# Altium schematic symbol library SG2002_QFN88_38_20230301_4L_V1.3_16.2_Library.SchLib: 126 symbols (part 3 of 5)
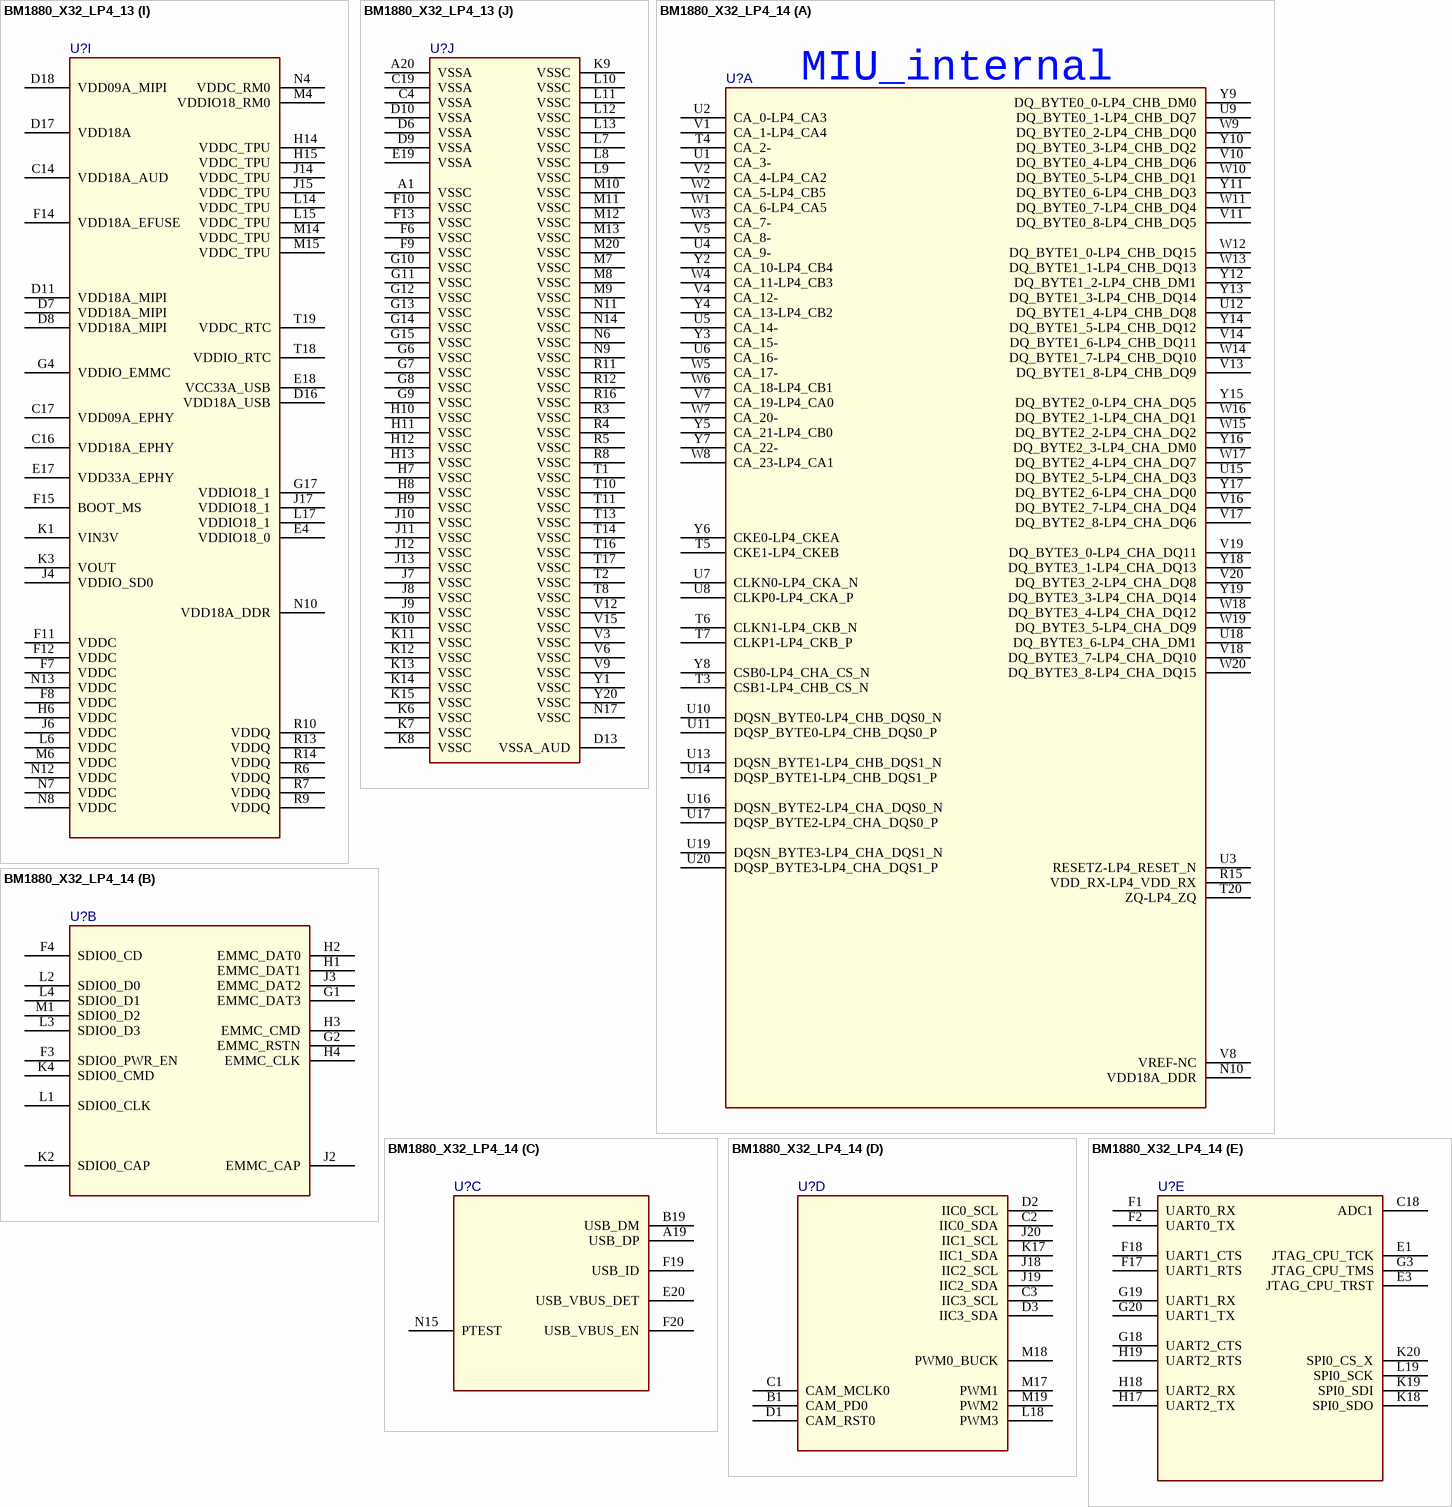
[diagram p51: symbols BM1880_X32_LP4_13 to BM1880_X32_LP4_14]

## BM1880_X32_LP4_13
designator U?
SPLIT_INST: TRUE; SWAP_INFO: (S1+S2+S3+S4+S5+S6+S7+S8+S9+S10)
footprint BGA378-26-2121-socket
part A pins: N10 VDD18A_DDR, R15 VDD_RX-LP4_VDD_RX, T3 CSB1-LP4_CHB_CS_N, T4 CA_2-, T5 CKE1-LP4_CKEB, T6 CLKN1-LP4_CKB_N, T7 CLKP1-LP4_CKB_P, T20 ZQ-LP4_ZQ, U1 CA_3-, U2 CA_0-LP4_CA3, U3 RESETZ-LP4_RESET_N, U4 CA_9-, U5 CA_14-, U6 CA_16-, U7 CLKN0-LP4_CKA_N, U8 CLKP0-LP4_CKA_P, U9 DQ_BYTE0_1-LP4_CHB_DQ7, U10 DQSN_BYTE0-LP4_CHB_DQS0_N, U11 DQSP_BYTE0-LP4_CHB_DQS0_P, U12 DQ_BYTE1_4-LP4_CHB_DQ8, U13 DQSN_BYTE1-LP4_CHB_DQS1_N, U14 DQSP_BYTE1-LP4_CHB_DQS1_P, U15 DQ_BYTE2_5-LP4_CHA_DQ3, U16 DQSN_BYTE2-LP4_CHA_DQS0_N, U17 DQSP_BYTE2-LP4_CHA_DQS0_P, U18 DQ_BYTE3_6-LP4_CHA_DM1, U19 DQSN_BYTE3-LP4_CHA_DQS1_N, U20 DQSP_BYTE3-LP4_CHA_DQS1_P, V1 CA_1-LP4_CA4, V2 CA_4-LP4_CA2, V4 CA_12-, V5 CA_8-, V7 CA_19-LP4_CA0, V8 VREF-NC, V10 DQ_BYTE0_4-LP4_CHB_DQ6, V11 DQ_BYTE0_8-LP4_CHB_DQ5, V13 DQ_BYTE1_8-LP4_CHB_DQ9, V14 DQ_BYTE1_6-LP4_CHB_DQ11, V16 DQ_BYTE2_7-LP4_CHA_DQ4, V17 DQ_BYTE2_8-LP4_CHA_DQ6, V18 DQ_BYTE3_7-LP4_CHA_DQ10, V19 DQ_BYTE3_0-LP4_CHA_DQ11, V20 DQ_BYTE3_2-LP4_CHA_DQ8, W1 CA_6-LP4_CA5, W2 CA_5-LP4_CB5, W3 CA_7-, W4 CA_11-LP4_CB3, W5 CA_17-, W6 CA_18-LP4_CB1, W7 CA_20-, W8 CA_23-LP4_CA1, W9 DQ_BYTE0_2-LP4_CHB_DQ0, W10 DQ_BYTE0_5-LP4_CHB_DQ1, W11 DQ_BYTE0_7-LP4_CHB_DQ4, W12 DQ_BYTE1_0-LP4_CHB_DQ15, W13 DQ_BYTE1_1-LP4_CHB_DQ13, W14 DQ_BYTE1_7-LP4_CHB_DQ10, W15 DQ_BYTE2_2-LP4_CHA_DQ2, W16 DQ_BYTE2_1-LP4_CHA_DQ1, W17 DQ_BYTE2_4-LP4_CHA_DQ7, W18 DQ_BYTE3_4-LP4_CHA_DQ12, W19 DQ_BYTE3_5-LP4_CHA_DQ9, W20 DQ_BYTE3_8-LP4_CHA_DQ15, Y2 CA_10-LP4_CB4, Y3 CA_15-, Y4 CA_13-LP4_CB2, Y5 CA_21-LP4_CB0, Y6 CKE0-LP4_CKEA, Y7 CA_22-, Y8 CSB0-LP4_CHA_CS_N, Y9 DQ_BYTE0_0-LP4_CHB_DM0, Y10 DQ_BYTE0_3-LP4_CHB_DQ2, Y11 DQ_BYTE0_6-LP4_CHB_DQ3, Y12 DQ_BYTE1_2-LP4_CHB_DM1, Y13 DQ_BYTE1_3-LP4_CHB_DQ14, Y14 DQ_BYTE1_5-LP4_CHB_DQ12, Y15 DQ_BYTE2_0-LP4_CHA_DQ5, Y16 DQ_BYTE2_3-LP4_CHA_DM0, Y17 DQ_BYTE2_6-LP4_CHA_DQ0, Y18 DQ_BYTE3_1-LP4_CHA_DQ13, Y19 DQ_BYTE3_3-LP4_CHA_DQ14
part B pins: F3 SDIO0_PWR_EN, F4 SDIO0_CD, G1 EMMC_DAT3, G2 EMMC_RSTN, H1 EMMC_DAT1, H2 EMMC_DAT0, H3 EMMC_CMD, H4 EMMC_CLK, J2 EMMC_CAP, J3 EMMC_DAT2, K2 SDIO0_CAP, K4 SDIO0_CMD, L1 SDIO0_CLK, L2 SDIO0_D0, L3 SDIO0_D3, L4 SDIO0_D1, M1 SDIO0_D2
part C pins: A19 USB_DP (power), B19 USB_DM (power), E20 USB_VBUS_DET (power), F19 USB_ID (power), F20 USB_VBUS_EN, N15 PTEST
part D pins: A15 AADC_AINR_MIC, A16 ADAC_AOUTR, B1 CAM_PD0, B15 AADC_AINL_MIC, B16 ADAC_AOUTL, C1 CAM_MCLK0, C2 IIC0_SDA, C3 IIC3_SCL, C15 ADAC_VREF_DA, D1 CAM_RST0, D2 IIC0_SCL, D3 IIC3_SDA, D14 AADC_VREF_AD, J18 IIC2_SCL, J19 IIC2_SDA, J20 IIC1_SCL, K17 IIC1_SDA, L18 PWM3, M17 PWM1, M18 PWM0_BUCK, M19 PWM2
part E pins: C18 ADC1, E1 JTAG_CPU_TCK, E3 JTAG_CPU_TRST, F1 UART0_RX, F2 UART0_TX, F17 UART1_RTS, F18 UART1_CTS, G3 JTAG_CPU_TMS, G18 UART2_CTS, G19 UART1_RX, G20 UART1_TX, H17 UART2_TX, H18 UART2_RX, H19 UART2_RTS, K18 SPI0_SDO, K19 SPI0_SDI, K20 SPI0_CS_X, L19 SPI0_SCK
part F pins: A17 EPHY_TXN, A18 EPHY_RXN, B17 EPHY_TXP, B18 EPHY_RXP, D15 EPHY_RTX, M2 RMII0_REFCLKI, M3 RMII0_TXD1, N2 RMII0_TXEN, N3 RMII0_TXD0, P1 RMII0_MDCK, P2 RMII0_MDIO, P3 RMII0_RXD0, P4 RMII0_RST, R1 RMII0_RXDV, R2 RMII0_RXD1
part G pins: B20 XTAL_XOUT, C20 XTAL_XIN, D19 CLK32K, D20 CLK25M, E2 RSTN, N18 PWR_ON, N19 PWR_SEQ2, N20 PWR_SEQ3, P17 PWR_WAKEUP1, P18 PWR_VBAT_DET, P19 PWR_BUTTON1, P20 PWR_SEQ1, R17 PWR_WAKEUP0, R18 RTC_MODE, R19 RTC_XIN, R20 RTC_XOUT
part H pins: A2 VI_DATA20 (power), A3 VI_DATA22 (power), A4 MIPIRX0_PAD1P (power), A5 MIPIRX0_PAD2P (power), A6 MIPIRX0_PAD3P (power), A7 MIPIRX0_PAD4P (power), A8 MIPIRX1_PAD4P (power), A9 MIPIRX1_PAD2P (power), A10 MIPIRX1_PAD0P (power), A11 PAD_MIPI_TXP0 (power), A12 PAD_MIPI_TXP2 (power), A13 PAD_MIPI_TXP3 (power), A14 VO_DATA0 (power), B2 VI_DATA19 (power), B3 VI_DATA21 (power), B4 MIPIRX0_PAD1N (power), B5 MIPIRX0_PAD2N (power), B6 MIPIRX0_PAD3N (power), B7 MIPIRX0_PAD4N (power), B8 MIPIRX1_PAD4N (power), B9 MIPIRX1_PAD2N (power), B10 MIPIRX1_PAD0N (power), B11 PAD_MIPI_TXM0 (power), B12 PAD_MIPI_TXM2 (power), B13 PAD_MIPI_TXM3 (power), B14 VO_DATA1 (power), C5 MIPIRX0_PAD0P (power), C6 MIPIRX0_PAD0N (power), C7 MIPIRX1_PAD3P (power), C8 MIPIRX1_PAD3N (power), C9 MIPIRX1_PAD1P (power), C10 MIPIRX1_PAD1N (power), C11 PAD_MIPI_TXP1 (power), C12 PAD_MIPI_TXM1 (power), C13 PAD_MIPI_TXM4 (power), D4 VI_DATA23 (power), D5 VI_DATA24 (power), D12 PAD_MIPI_TXP4 (power)
part I pins: C14 VDD18A_AUD (power), C16 VDD18A_EPHY (power), C17 VDD09A_EPHY (power), D7 VDD18A_MIPI (power), D8 VDD18A_MIPI (power), D11 VDD18A_MIPI (power), D16 VDD18A_USB, D17 VDD18A (power), D18 VDD09A_MIPI (power), E4 VDDIO18_0 (power), E17 VDD33A_EPHY (power), E18 VCC33A_USB, F7 VDDC (power), F8 VDDC (power), F11 VDDC (power), F12 VDDC (power), F14 VDD18A_EFUSE (power), F15 BOOT_MS, G4 VDDIO_EMMC (power), G17 VDDIO18_1 (power), H6 VDDC (power), H14 VDDC_TPU (power), H15 VDDC_TPU (power), J4 VDDIO_SD0 (power), J6 VDDC (power), J14 VDDC_TPU (power), J15 VDDC_TPU (power), J17 VDDIO18_1 (power), K1 VIN3V (power), K3 VOUT (power), L6 VDDC (power), L14 VDDC_TPU (power), L15 VDDC_TPU (power), L17 VDDIO18_1 (power), M4 VDDIO18_RM0 (power), M6 VDDC (power), M14 VDDC_TPU (power), M15 VDDC_TPU (power), N4 VDDC_RM0 (power), N7 VDDC (power), N8 VDDC (power), N10 VDD18A_DDR (power), N12 VDDC (power), N13 VDDC (power), R6 VDDQ (power), R7 VDDQ (power), R9 VDDQ (power), R10 VDDQ (power), R13 VDDQ (power), R14 VDDQ (power), T18 VDDIO_RTC (power), T19 VDDC_RTC (power)
part J pins: A1 VSSC (power), A20 VSSA (power), C4 VSSA (power), C19 VSSA (power), D6 VSSA (power), D9 VSSA (power), D10 VSSA (power), D13 VSSA_AUD (power), E19 VSSA (power), F6 VSSC (power), F9 VSSC (power), F10 VSSC (power), F13 VSSC (power), G6 VSSC (power), G7 VSSC (power), G8 VSSC (power), G9 VSSC (power), G10 VSSC (power), G11 VSSC (power), G12 VSSC (power), G13 VSSC (power), G14 VSSC (power), G15 VSSC (power), H7 VSSC (power), H8 VSSC (power), H9 VSSC (power), H10 VSSC (power), H11 VSSC (power), H12 VSSC (power), H13 VSSC (power), J7 VSSC (power), J8 VSSC (power), J9 VSSC (power), J10 VSSC (power), J11 VSSC (power), J12 VSSC (power), J13 VSSC (power), K6 VSSC (power), K7 VSSC (power), K8 VSSC (power), K9 VSSC (power), K10 VSSC (power), K11 VSSC (power), K12 VSSC (power), K13 VSSC (power), K14 VSSC (power), K15 VSSC (power), L7 VSSC (power), L8 VSSC (power), L9 VSSC (power), L10 VSSC (power), L11 VSSC (power), L12 VSSC (power), L13 VSSC (power), M7 VSSC (power), M8 VSSC (power), M9 VSSC (power), M10 VSSC (power), M11 VSSC (power), M12 VSSC (power), M13 VSSC (power), M20 VSSC (power), N6 VSSC (power), N9 VSSC (power), N11 VSSC (power), N14 VSSC (power), N17 VSSC (power), R3 VSSC (power), R4 VSSC (power), R5 VSSC (power), R8 VSSC (power), R11 VSSC (power), R12 VSSC (power), R16 VSSC (power), T1 VSSC (power), T2 VSSC (power), T8 VSSC (power), T10 VSSC (power), T11 VSSC (power), T13 VSSC (power), T14 VSSC (power), T16 VSSC (power), T17 VSSC (power), V3 VSSC (power), V6 VSSC (power), V9 VSSC (power), V12 VSSC (power), V15 VSSC (power), Y1 VSSC (power), Y20 VSSC (power)
part A text: MIU_internal

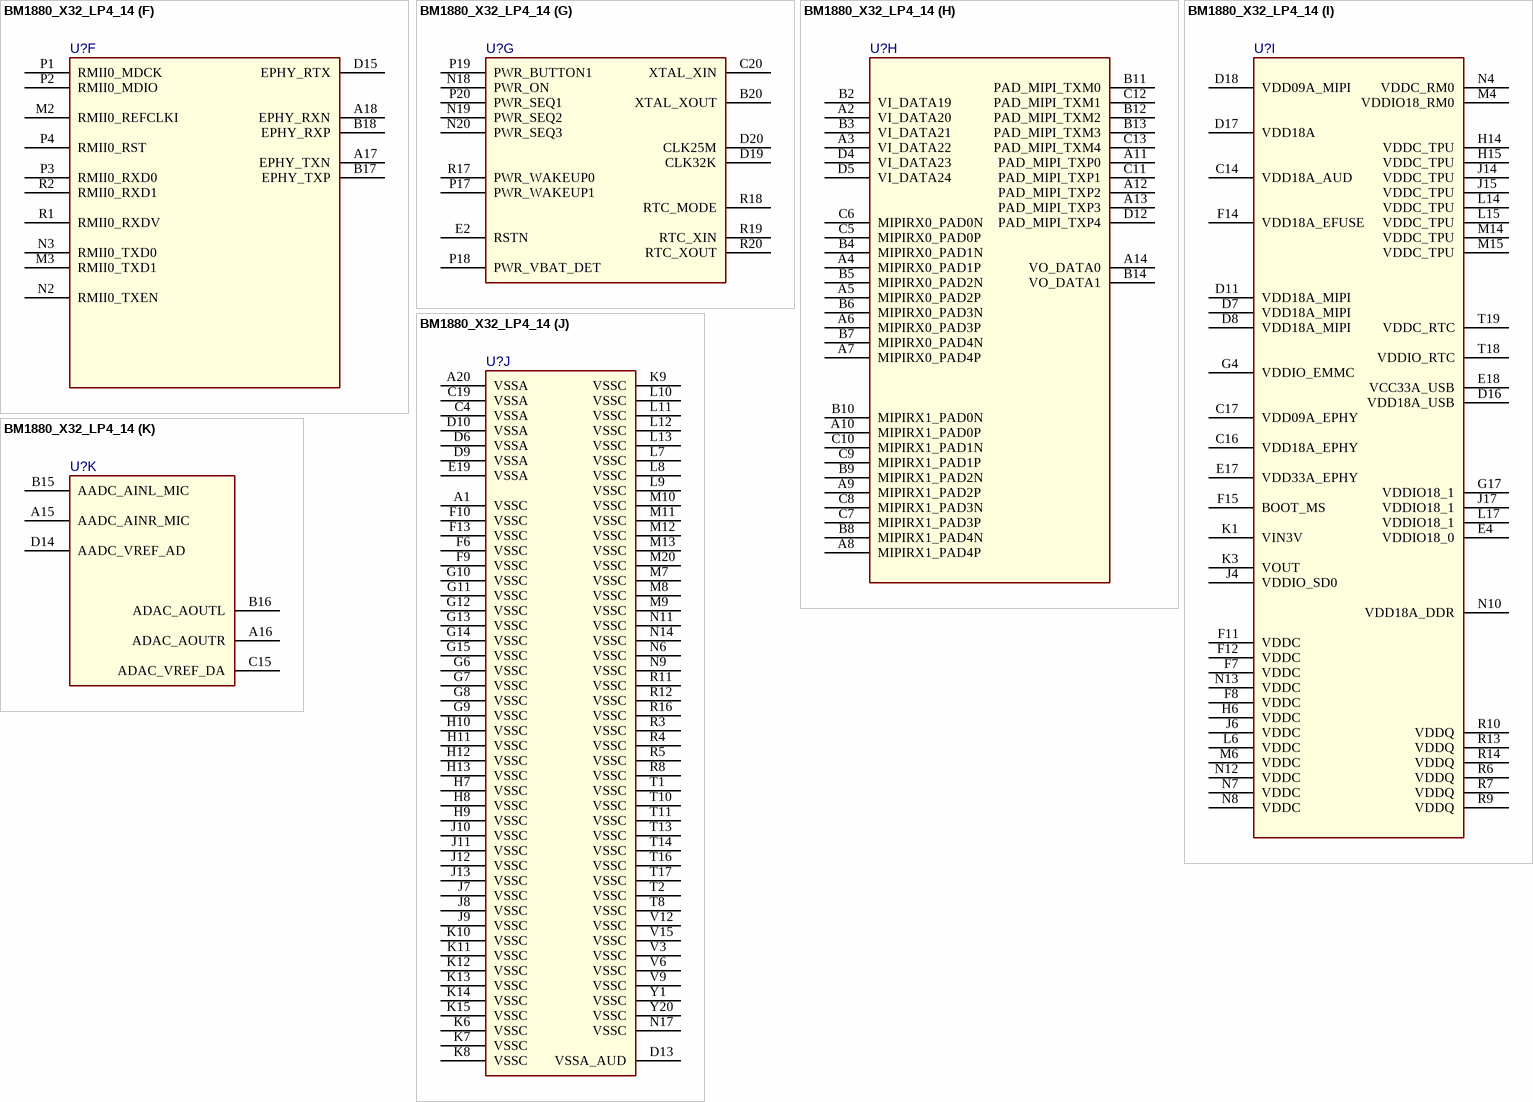
[diagram p27: symbol BM1880_X32_LP4_14]

## BM1880_X32_LP4_14
designator U?
SPLIT_INST: TRUE; SWAP_INFO: (S1+S2+S3+S4+S5+S6+S7+S8+S9+S10)
footprint BGA378-26-2121-socket
part A pins: N10 VDD18A_DDR, R15 VDD_RX-LP4_VDD_RX, T3 CSB1-LP4_CHB_CS_N, T4 CA_2-, T5 CKE1-LP4_CKEB, T6 CLKN1-LP4_CKB_N, T7 CLKP1-LP4_CKB_P, T20 ZQ-LP4_ZQ, U1 CA_3-, U2 CA_0-LP4_CA3, U3 RESETZ-LP4_RESET_N, U4 CA_9-, U5 CA_14-, U6 CA_16-, U7 CLKN0-LP4_CKA_N, U8 CLKP0-LP4_CKA_P, U9 DQ_BYTE0_1-LP4_CHB_DQ7, U10 DQSN_BYTE0-LP4_CHB_DQS0_N, U11 DQSP_BYTE0-LP4_CHB_DQS0_P, U12 DQ_BYTE1_4-LP4_CHB_DQ8, U13 DQSN_BYTE1-LP4_CHB_DQS1_N, U14 DQSP_BYTE1-LP4_CHB_DQS1_P, U15 DQ_BYTE2_5-LP4_CHA_DQ3, U16 DQSN_BYTE2-LP4_CHA_DQS0_N, U17 DQSP_BYTE2-LP4_CHA_DQS0_P, U18 DQ_BYTE3_6-LP4_CHA_DM1, U19 DQSN_BYTE3-LP4_CHA_DQS1_N, U20 DQSP_BYTE3-LP4_CHA_DQS1_P, V1 CA_1-LP4_CA4, V2 CA_4-LP4_CA2, V4 CA_12-, V5 CA_8-, V7 CA_19-LP4_CA0, V8 VREF-NC, V10 DQ_BYTE0_4-LP4_CHB_DQ6, V11 DQ_BYTE0_8-LP4_CHB_DQ5, V13 DQ_BYTE1_8-LP4_CHB_DQ9, V14 DQ_BYTE1_6-LP4_CHB_DQ11, V16 DQ_BYTE2_7-LP4_CHA_DQ4, V17 DQ_BYTE2_8-LP4_CHA_DQ6, V18 DQ_BYTE3_7-LP4_CHA_DQ10, V19 DQ_BYTE3_0-LP4_CHA_DQ11, V20 DQ_BYTE3_2-LP4_CHA_DQ8, W1 CA_6-LP4_CA5, W2 CA_5-LP4_CB5, W3 CA_7-, W4 CA_11-LP4_CB3, W5 CA_17-, W6 CA_18-LP4_CB1, W7 CA_20-, W8 CA_23-LP4_CA1, W9 DQ_BYTE0_2-LP4_CHB_DQ0, W10 DQ_BYTE0_5-LP4_CHB_DQ1, W11 DQ_BYTE0_7-LP4_CHB_DQ4, W12 DQ_BYTE1_0-LP4_CHB_DQ15, W13 DQ_BYTE1_1-LP4_CHB_DQ13, W14 DQ_BYTE1_7-LP4_CHB_DQ10, W15 DQ_BYTE2_2-LP4_CHA_DQ2, W16 DQ_BYTE2_1-LP4_CHA_DQ1, W17 DQ_BYTE2_4-LP4_CHA_DQ7, W18 DQ_BYTE3_4-LP4_CHA_DQ12, W19 DQ_BYTE3_5-LP4_CHA_DQ9, W20 DQ_BYTE3_8-LP4_CHA_DQ15, Y2 CA_10-LP4_CB4, Y3 CA_15-, Y4 CA_13-LP4_CB2, Y5 CA_21-LP4_CB0, Y6 CKE0-LP4_CKEA, Y7 CA_22-, Y8 CSB0-LP4_CHA_CS_N, Y9 DQ_BYTE0_0-LP4_CHB_DM0, Y10 DQ_BYTE0_3-LP4_CHB_DQ2, Y11 DQ_BYTE0_6-LP4_CHB_DQ3, Y12 DQ_BYTE1_2-LP4_CHB_DM1, Y13 DQ_BYTE1_3-LP4_CHB_DQ14, Y14 DQ_BYTE1_5-LP4_CHB_DQ12, Y15 DQ_BYTE2_0-LP4_CHA_DQ5, Y16 DQ_BYTE2_3-LP4_CHA_DM0, Y17 DQ_BYTE2_6-LP4_CHA_DQ0, Y18 DQ_BYTE3_1-LP4_CHA_DQ13, Y19 DQ_BYTE3_3-LP4_CHA_DQ14
part B pins: F3 SDIO0_PWR_EN, F4 SDIO0_CD, G1 EMMC_DAT3, G2 EMMC_RSTN, H1 EMMC_DAT1, H2 EMMC_DAT0, H3 EMMC_CMD, H4 EMMC_CLK, J2 EMMC_CAP, J3 EMMC_DAT2, K2 SDIO0_CAP, K4 SDIO0_CMD, L1 SDIO0_CLK, L2 SDIO0_D0, L3 SDIO0_D3, L4 SDIO0_D1, M1 SDIO0_D2
part C pins: A19 USB_DP (power), B19 USB_DM (power), E20 USB_VBUS_DET (power), F19 USB_ID (power), F20 USB_VBUS_EN, N15 PTEST
part D pins: B1 CAM_PD0, C1 CAM_MCLK0, C2 IIC0_SDA, C3 IIC3_SCL, D1 CAM_RST0, D2 IIC0_SCL, D3 IIC3_SDA, J18 IIC2_SCL, J19 IIC2_SDA, J20 IIC1_SCL, K17 IIC1_SDA, L18 PWM3, M17 PWM1, M18 PWM0_BUCK, M19 PWM2
part E pins: C18 ADC1, E1 JTAG_CPU_TCK, E3 JTAG_CPU_TRST, F1 UART0_RX, F2 UART0_TX, F17 UART1_RTS, F18 UART1_CTS, G3 JTAG_CPU_TMS, G18 UART2_CTS, G19 UART1_RX, G20 UART1_TX, H17 UART2_TX, H18 UART2_RX, H19 UART2_RTS, K18 SPI0_SDO, K19 SPI0_SDI, K20 SPI0_CS_X, L19 SPI0_SCK
part F pins: A17 EPHY_TXN, A18 EPHY_RXN, B17 EPHY_TXP, B18 EPHY_RXP, D15 EPHY_RTX, M2 RMII0_REFCLKI, M3 RMII0_TXD1, N2 RMII0_TXEN, N3 RMII0_TXD0, P1 RMII0_MDCK, P2 RMII0_MDIO, P3 RMII0_RXD0, P4 RMII0_RST, R1 RMII0_RXDV, R2 RMII0_RXD1
part G pins: B20 XTAL_XOUT, C20 XTAL_XIN, D19 CLK32K, D20 CLK25M, E2 RSTN, N18 PWR_ON, N19 PWR_SEQ2, N20 PWR_SEQ3, P17 PWR_WAKEUP1, P18 PWR_VBAT_DET, P19 PWR_BUTTON1, P20 PWR_SEQ1, R17 PWR_WAKEUP0, R18 RTC_MODE, R19 RTC_XIN, R20 RTC_XOUT
part H pins: A2 VI_DATA20 (power), A3 VI_DATA22 (power), A4 MIPIRX0_PAD1P (power), A5 MIPIRX0_PAD2P (power), A6 MIPIRX0_PAD3P (power), A7 MIPIRX0_PAD4P (power), A8 MIPIRX1_PAD4P (power), A9 MIPIRX1_PAD2P (power), A10 MIPIRX1_PAD0P (power), A11 PAD_MIPI_TXP0 (power), A12 PAD_MIPI_TXP2 (power), A13 PAD_MIPI_TXP3 (power), A14 VO_DATA0 (power), B2 VI_DATA19 (power), B3 VI_DATA21 (power), B4 MIPIRX0_PAD1N (power), B5 MIPIRX0_PAD2N (power), B6 MIPIRX0_PAD3N (power), B7 MIPIRX0_PAD4N (power), B8 MIPIRX1_PAD4N (power), B9 MIPIRX1_PAD2N (power), B10 MIPIRX1_PAD0N (power), B11 PAD_MIPI_TXM0 (power), B12 PAD_MIPI_TXM2 (power), B13 PAD_MIPI_TXM3 (power), B14 VO_DATA1 (power), C5 MIPIRX0_PAD0P (power), C6 MIPIRX0_PAD0N (power), C7 MIPIRX1_PAD3P (power), C8 MIPIRX1_PAD3N (power), C9 MIPIRX1_PAD1P (power), C10 MIPIRX1_PAD1N (power), C11 PAD_MIPI_TXP1 (power), C12 PAD_MIPI_TXM1 (power), C13 PAD_MIPI_TXM4 (power), D4 VI_DATA23 (power), D5 VI_DATA24 (power), D12 PAD_MIPI_TXP4 (power)
part I pins: C14 VDD18A_AUD (power), C16 VDD18A_EPHY (power), C17 VDD09A_EPHY (power), D7 VDD18A_MIPI (power), D8 VDD18A_MIPI (power), D11 VDD18A_MIPI (power), D16 VDD18A_USB, D17 VDD18A (power), D18 VDD09A_MIPI (power), E4 VDDIO18_0 (power), E17 VDD33A_EPHY (power), E18 VCC33A_USB, F7 VDDC (power), F8 VDDC (power), F11 VDDC (power), F12 VDDC (power), F14 VDD18A_EFUSE (power), F15 BOOT_MS, G4 VDDIO_EMMC (power), G17 VDDIO18_1 (power), H6 VDDC (power), H14 VDDC_TPU (power), H15 VDDC_TPU (power), J4 VDDIO_SD0 (power), J6 VDDC (power), J14 VDDC_TPU (power), J15 VDDC_TPU (power), J17 VDDIO18_1 (power), K1 VIN3V (power), K3 VOUT (power), L6 VDDC (power), L14 VDDC_TPU (power), L15 VDDC_TPU (power), L17 VDDIO18_1 (power), M4 VDDIO18_RM0 (power), M6 VDDC (power), M14 VDDC_TPU (power), M15 VDDC_TPU (power), N4 VDDC_RM0 (power), N7 VDDC (power), N8 VDDC (power), N10 VDD18A_DDR (power), N12 VDDC (power), N13 VDDC (power), R6 VDDQ (power), R7 VDDQ (power), R9 VDDQ (power), R10 VDDQ (power), R13 VDDQ (power), R14 VDDQ (power), T18 VDDIO_RTC (power), T19 VDDC_RTC (power)
part J pins: A1 VSSC (power), A20 VSSA (power), C4 VSSA (power), C19 VSSA (power), D6 VSSA (power), D9 VSSA (power), D10 VSSA (power), D13 VSSA_AUD (power), E19 VSSA (power), F6 VSSC (power), F9 VSSC (power), F10 VSSC (power), F13 VSSC (power), G6 VSSC (power), G7 VSSC (power), G8 VSSC (power), G9 VSSC (power), G10 VSSC (power), G11 VSSC (power), G12 VSSC (power), G13 VSSC (power), G14 VSSC (power), G15 VSSC (power), H7 VSSC (power), H8 VSSC (power), H9 VSSC (power), H10 VSSC (power), H11 VSSC (power), H12 VSSC (power), H13 VSSC (power), J7 VSSC (power), J8 VSSC (power), J9 VSSC (power), J10 VSSC (power), J11 VSSC (power), J12 VSSC (power), J13 VSSC (power), K6 VSSC (power), K7 VSSC (power), K8 VSSC (power), K9 VSSC (power), K10 VSSC (power), K11 VSSC (power), K12 VSSC (power), K13 VSSC (power), K14 VSSC (power), K15 VSSC (power), L7 VSSC (power), L8 VSSC (power), L9 VSSC (power), L10 VSSC (power), L11 VSSC (power), L12 VSSC (power), L13 VSSC (power), M7 VSSC (power), M8 VSSC (power), M9 VSSC (power), M10 VSSC (power), M11 VSSC (power), M12 VSSC (power), M13 VSSC (power), M20 VSSC (power), N6 VSSC (power), N9 VSSC (power), N11 VSSC (power), N14 VSSC (power), N17 VSSC (power), R3 VSSC (power), R4 VSSC (power), R5 VSSC (power), R8 VSSC (power), R11 VSSC (power), R12 VSSC (power), R16 VSSC (power), T1 VSSC (power), T2 VSSC (power), T8 VSSC (power), T10 VSSC (power), T11 VSSC (power), T13 VSSC (power), T14 VSSC (power), T16 VSSC (power), T17 VSSC (power), V3 VSSC (power), V6 VSSC (power), V9 VSSC (power), V12 VSSC (power), V15 VSSC (power), Y1 VSSC (power), Y20 VSSC (power)
part K pins: A15 AADC_AINR_MIC, A16 ADAC_AOUTR, B15 AADC_AINL_MIC, B16 ADAC_AOUTL, C15 ADAC_VREF_DA, D14 AADC_VREF_AD
part A text: MIU_internal

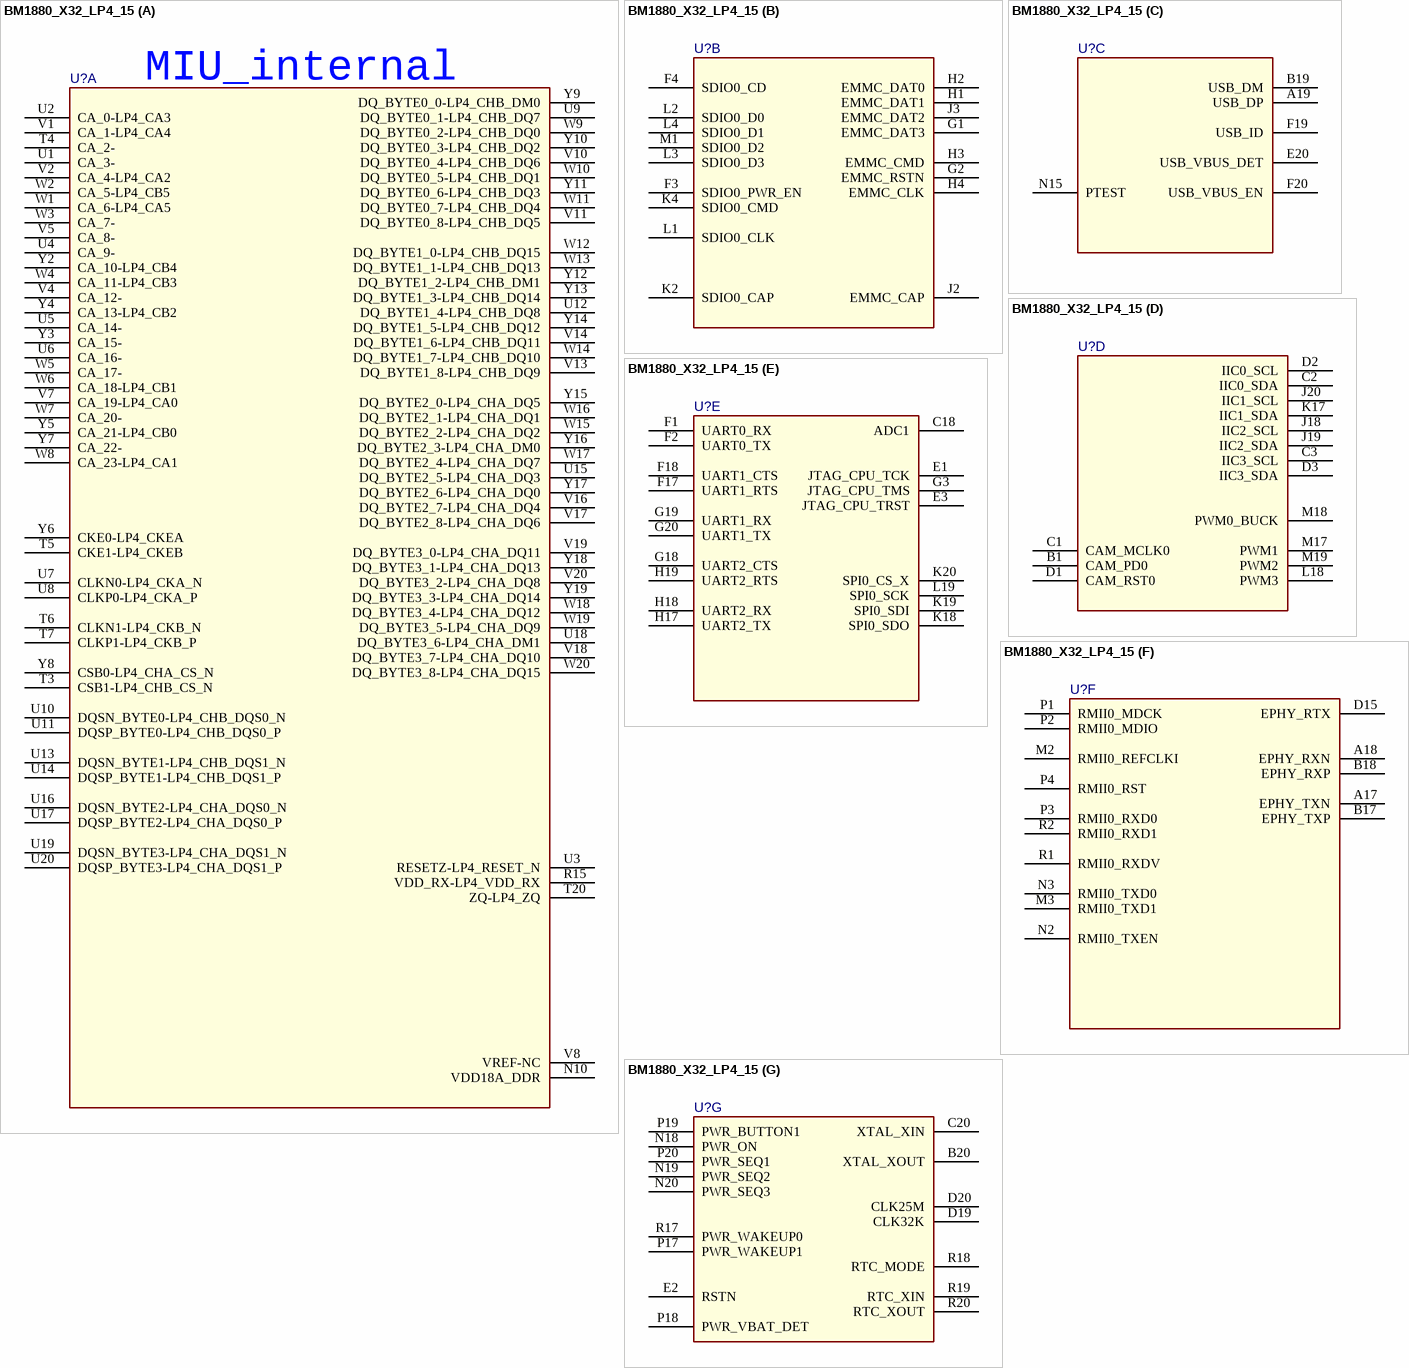
[diagram p28: symbol BM1880_X32_LP4_15]

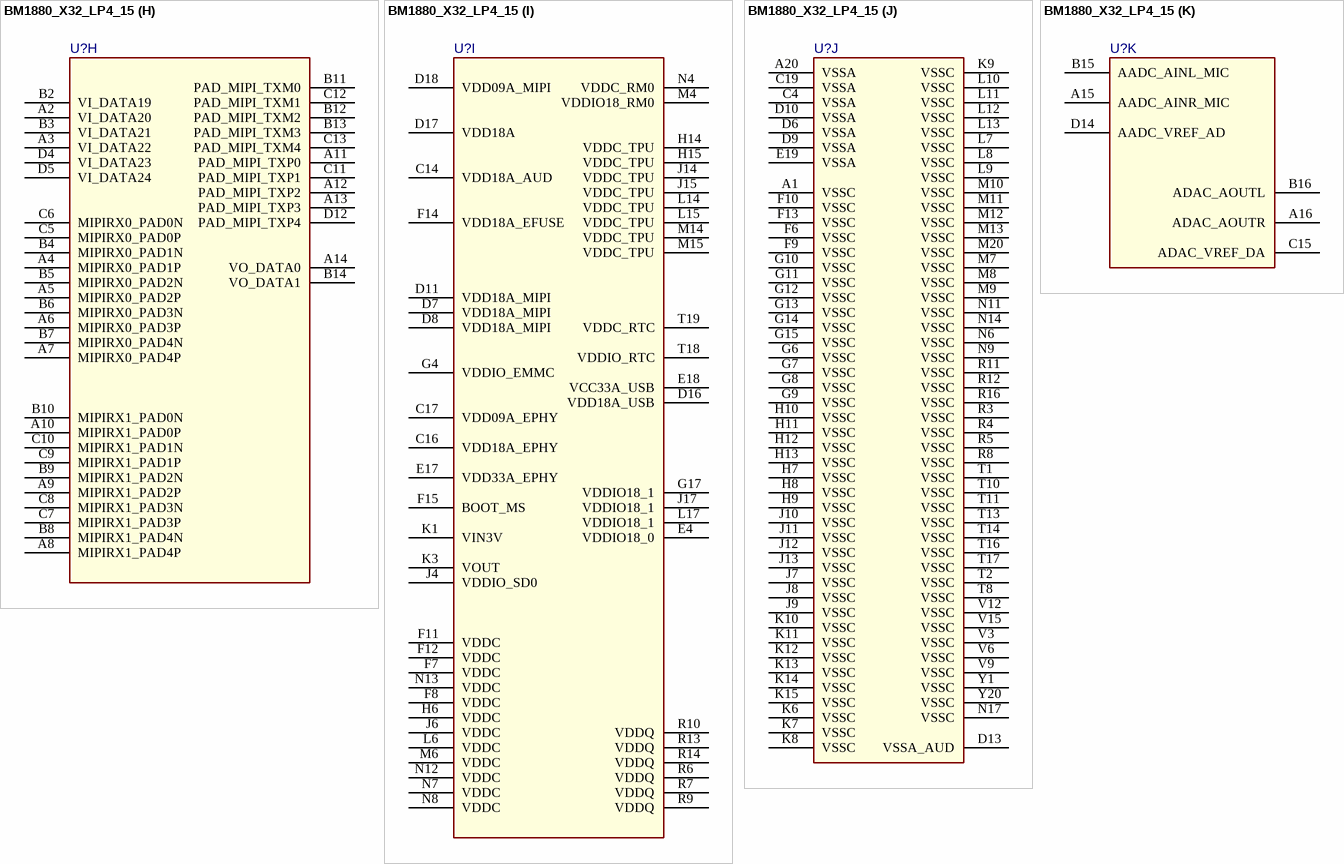
[diagram p29: symbol BM1880_X32_LP4_15]

## BM1880_X32_LP4_15
designator U?
SPLIT_INST: TRUE; SWAP_INFO: (S1+S2+S3+S4+S5+S6+S7+S8+S9+S10)
footprint BGA378-26-2121-socket
part A pins: N10 VDD18A_DDR, R15 VDD_RX-LP4_VDD_RX, T3 CSB1-LP4_CHB_CS_N, T4 CA_2-, T5 CKE1-LP4_CKEB, T6 CLKN1-LP4_CKB_N, T7 CLKP1-LP4_CKB_P, T20 ZQ-LP4_ZQ, U1 CA_3-, U2 CA_0-LP4_CA3, U3 RESETZ-LP4_RESET_N, U4 CA_9-, U5 CA_14-, U6 CA_16-, U7 CLKN0-LP4_CKA_N, U8 CLKP0-LP4_CKA_P, U9 DQ_BYTE0_1-LP4_CHB_DQ7, U10 DQSN_BYTE0-LP4_CHB_DQS0_N, U11 DQSP_BYTE0-LP4_CHB_DQS0_P, U12 DQ_BYTE1_4-LP4_CHB_DQ8, U13 DQSN_BYTE1-LP4_CHB_DQS1_N, U14 DQSP_BYTE1-LP4_CHB_DQS1_P, U15 DQ_BYTE2_5-LP4_CHA_DQ3, U16 DQSN_BYTE2-LP4_CHA_DQS0_N, U17 DQSP_BYTE2-LP4_CHA_DQS0_P, U18 DQ_BYTE3_6-LP4_CHA_DM1, U19 DQSN_BYTE3-LP4_CHA_DQS1_N, U20 DQSP_BYTE3-LP4_CHA_DQS1_P, V1 CA_1-LP4_CA4, V2 CA_4-LP4_CA2, V4 CA_12-, V5 CA_8-, V7 CA_19-LP4_CA0, V8 VREF-NC, V10 DQ_BYTE0_4-LP4_CHB_DQ6, V11 DQ_BYTE0_8-LP4_CHB_DQ5, V13 DQ_BYTE1_8-LP4_CHB_DQ9, V14 DQ_BYTE1_6-LP4_CHB_DQ11, V16 DQ_BYTE2_7-LP4_CHA_DQ4, V17 DQ_BYTE2_8-LP4_CHA_DQ6, V18 DQ_BYTE3_7-LP4_CHA_DQ10, V19 DQ_BYTE3_0-LP4_CHA_DQ11, V20 DQ_BYTE3_2-LP4_CHA_DQ8, W1 CA_6-LP4_CA5, W2 CA_5-LP4_CB5, W3 CA_7-, W4 CA_11-LP4_CB3, W5 CA_17-, W6 CA_18-LP4_CB1, W7 CA_20-, W8 CA_23-LP4_CA1, W9 DQ_BYTE0_2-LP4_CHB_DQ0, W10 DQ_BYTE0_5-LP4_CHB_DQ1, W11 DQ_BYTE0_7-LP4_CHB_DQ4, W12 DQ_BYTE1_0-LP4_CHB_DQ15, W13 DQ_BYTE1_1-LP4_CHB_DQ13, W14 DQ_BYTE1_7-LP4_CHB_DQ10, W15 DQ_BYTE2_2-LP4_CHA_DQ2, W16 DQ_BYTE2_1-LP4_CHA_DQ1, W17 DQ_BYTE2_4-LP4_CHA_DQ7, W18 DQ_BYTE3_4-LP4_CHA_DQ12, W19 DQ_BYTE3_5-LP4_CHA_DQ9, W20 DQ_BYTE3_8-LP4_CHA_DQ15, Y2 CA_10-LP4_CB4, Y3 CA_15-, Y4 CA_13-LP4_CB2, Y5 CA_21-LP4_CB0, Y6 CKE0-LP4_CKEA, Y7 CA_22-, Y8 CSB0-LP4_CHA_CS_N, Y9 DQ_BYTE0_0-LP4_CHB_DM0, Y10 DQ_BYTE0_3-LP4_CHB_DQ2, Y11 DQ_BYTE0_6-LP4_CHB_DQ3, Y12 DQ_BYTE1_2-LP4_CHB_DM1, Y13 DQ_BYTE1_3-LP4_CHB_DQ14, Y14 DQ_BYTE1_5-LP4_CHB_DQ12, Y15 DQ_BYTE2_0-LP4_CHA_DQ5, Y16 DQ_BYTE2_3-LP4_CHA_DM0, Y17 DQ_BYTE2_6-LP4_CHA_DQ0, Y18 DQ_BYTE3_1-LP4_CHA_DQ13, Y19 DQ_BYTE3_3-LP4_CHA_DQ14
part B pins: F3 SDIO0_PWR_EN, F4 SDIO0_CD, G1 EMMC_DAT3, G2 EMMC_RSTN, H1 EMMC_DAT1, H2 EMMC_DAT0, H3 EMMC_CMD, H4 EMMC_CLK, J2 EMMC_CAP, J3 EMMC_DAT2, K2 SDIO0_CAP, K4 SDIO0_CMD, L1 SDIO0_CLK, L2 SDIO0_D0, L3 SDIO0_D3, L4 SDIO0_D1, M1 SDIO0_D2
part C pins: A19 USB_DP (power), B19 USB_DM (power), E20 USB_VBUS_DET (power), F19 USB_ID (power), F20 USB_VBUS_EN, N15 PTEST
part D pins: B1 CAM_PD0, C1 CAM_MCLK0, C2 IIC0_SDA, C3 IIC3_SCL, D1 CAM_RST0, D2 IIC0_SCL, D3 IIC3_SDA, J18 IIC2_SCL, J19 IIC2_SDA, J20 IIC1_SCL, K17 IIC1_SDA, L18 PWM3, M17 PWM1, M18 PWM0_BUCK, M19 PWM2
part E pins: C18 ADC1, E1 JTAG_CPU_TCK, E3 JTAG_CPU_TRST, F1 UART0_RX, F2 UART0_TX, F17 UART1_RTS, F18 UART1_CTS, G3 JTAG_CPU_TMS, G18 UART2_CTS, G19 UART1_RX, G20 UART1_TX, H17 UART2_TX, H18 UART2_RX, H19 UART2_RTS, K18 SPI0_SDO, K19 SPI0_SDI, K20 SPI0_CS_X, L19 SPI0_SCK
part F pins: A17 EPHY_TXN, A18 EPHY_RXN, B17 EPHY_TXP, B18 EPHY_RXP, D15 EPHY_RTX, M2 RMII0_REFCLKI, M3 RMII0_TXD1, N2 RMII0_TXEN, N3 RMII0_TXD0, P1 RMII0_MDCK, P2 RMII0_MDIO, P3 RMII0_RXD0, P4 RMII0_RST, R1 RMII0_RXDV, R2 RMII0_RXD1
part G pins: B20 XTAL_XOUT, C20 XTAL_XIN, D19 CLK32K, D20 CLK25M, E2 RSTN, N18 PWR_ON, N19 PWR_SEQ2, N20 PWR_SEQ3, P17 PWR_WAKEUP1, P18 PWR_VBAT_DET, P19 PWR_BUTTON1, P20 PWR_SEQ1, R17 PWR_WAKEUP0, R18 RTC_MODE, R19 RTC_XIN, R20 RTC_XOUT
part H pins: A2 VI_DATA20 (power), A3 VI_DATA22 (power), A4 MIPIRX0_PAD1P (power), A5 MIPIRX0_PAD2P (power), A6 MIPIRX0_PAD3P (power), A7 MIPIRX0_PAD4P (power), A8 MIPIRX1_PAD4P (power), A9 MIPIRX1_PAD2P (power), A10 MIPIRX1_PAD0P (power), A11 PAD_MIPI_TXP0 (power), A12 PAD_MIPI_TXP2 (power), A13 PAD_MIPI_TXP3 (power), A14 VO_DATA0 (power), B2 VI_DATA19 (power), B3 VI_DATA21 (power), B4 MIPIRX0_PAD1N (power), B5 MIPIRX0_PAD2N (power), B6 MIPIRX0_PAD3N (power), B7 MIPIRX0_PAD4N (power), B8 MIPIRX1_PAD4N (power), B9 MIPIRX1_PAD2N (power), B10 MIPIRX1_PAD0N (power), B11 PAD_MIPI_TXM0 (power), B12 PAD_MIPI_TXM2 (power), B13 PAD_MIPI_TXM3 (power), B14 VO_DATA1 (power), C5 MIPIRX0_PAD0P (power), C6 MIPIRX0_PAD0N (power), C7 MIPIRX1_PAD3P (power), C8 MIPIRX1_PAD3N (power), C9 MIPIRX1_PAD1P (power), C10 MIPIRX1_PAD1N (power), C11 PAD_MIPI_TXP1 (power), C12 PAD_MIPI_TXM1 (power), C13 PAD_MIPI_TXM4 (power), D4 VI_DATA23 (power), D5 VI_DATA24 (power), D12 PAD_MIPI_TXP4 (power)
part I pins: C14 VDD18A_AUD (power), C16 VDD18A_EPHY (power), C17 VDD09A_EPHY (power), D7 VDD18A_MIPI (power), D8 VDD18A_MIPI (power), D11 VDD18A_MIPI (power), D16 VDD18A_USB, D17 VDD18A (power), D18 VDD09A_MIPI (power), E4 VDDIO18_0 (power), E17 VDD33A_EPHY (power), E18 VCC33A_USB, F7 VDDC (power), F8 VDDC (power), F11 VDDC (power), F12 VDDC (power), F14 VDD18A_EFUSE (power), F15 BOOT_MS, G4 VDDIO_EMMC (power), G17 VDDIO18_1 (power), H6 VDDC (power), H14 VDDC_TPU (power), H15 VDDC_TPU (power), J4 VDDIO_SD0 (power), J6 VDDC (power), J14 VDDC_TPU (power), J15 VDDC_TPU (power), J17 VDDIO18_1 (power), K1 VIN3V (power), K3 VOUT (power), L6 VDDC (power), L14 VDDC_TPU (power), L15 VDDC_TPU (power), L17 VDDIO18_1 (power), M4 VDDIO18_RM0 (power), M6 VDDC (power), M14 VDDC_TPU (power), M15 VDDC_TPU (power), N4 VDDC_RM0 (power), N7 VDDC (power), N8 VDDC (power), N12 VDDC (power), N13 VDDC (power), R6 VDDQ (power), R7 VDDQ (power), R9 VDDQ (power), R10 VDDQ (power), R13 VDDQ (power), R14 VDDQ (power), T18 VDDIO_RTC (power), T19 VDDC_RTC (power)
part J pins: A1 VSSC (power), A20 VSSA (power), C4 VSSA (power), C19 VSSA (power), D6 VSSA (power), D9 VSSA (power), D10 VSSA (power), D13 VSSA_AUD (power), E19 VSSA (power), F6 VSSC (power), F9 VSSC (power), F10 VSSC (power), F13 VSSC (power), G6 VSSC (power), G7 VSSC (power), G8 VSSC (power), G9 VSSC (power), G10 VSSC (power), G11 VSSC (power), G12 VSSC (power), G13 VSSC (power), G14 VSSC (power), G15 VSSC (power), H7 VSSC (power), H8 VSSC (power), H9 VSSC (power), H10 VSSC (power), H11 VSSC (power), H12 VSSC (power), H13 VSSC (power), J7 VSSC (power), J8 VSSC (power), J9 VSSC (power), J10 VSSC (power), J11 VSSC (power), J12 VSSC (power), J13 VSSC (power), K6 VSSC (power), K7 VSSC (power), K8 VSSC (power), K9 VSSC (power), K10 VSSC (power), K11 VSSC (power), K12 VSSC (power), K13 VSSC (power), K14 VSSC (power), K15 VSSC (power), L7 VSSC (power), L8 VSSC (power), L9 VSSC (power), L10 VSSC (power), L11 VSSC (power), L12 VSSC (power), L13 VSSC (power), M7 VSSC (power), M8 VSSC (power), M9 VSSC (power), M10 VSSC (power), M11 VSSC (power), M12 VSSC (power), M13 VSSC (power), M20 VSSC (power), N6 VSSC (power), N9 VSSC (power), N11 VSSC (power), N14 VSSC (power), N17 VSSC (power), R3 VSSC (power), R4 VSSC (power), R5 VSSC (power), R8 VSSC (power), R11 VSSC (power), R12 VSSC (power), R16 VSSC (power), T1 VSSC (power), T2 VSSC (power), T8 VSSC (power), T10 VSSC (power), T11 VSSC (power), T13 VSSC (power), T14 VSSC (power), T16 VSSC (power), T17 VSSC (power), V3 VSSC (power), V6 VSSC (power), V9 VSSC (power), V12 VSSC (power), V15 VSSC (power), Y1 VSSC (power), Y20 VSSC (power)
part K pins: A15 AADC_AINR_MIC, A16 ADAC_AOUTR, B15 AADC_AINL_MIC, B16 ADAC_AOUTL, C15 ADAC_VREF_DA, D14 AADC_VREF_AD
part A text: MIU_internal

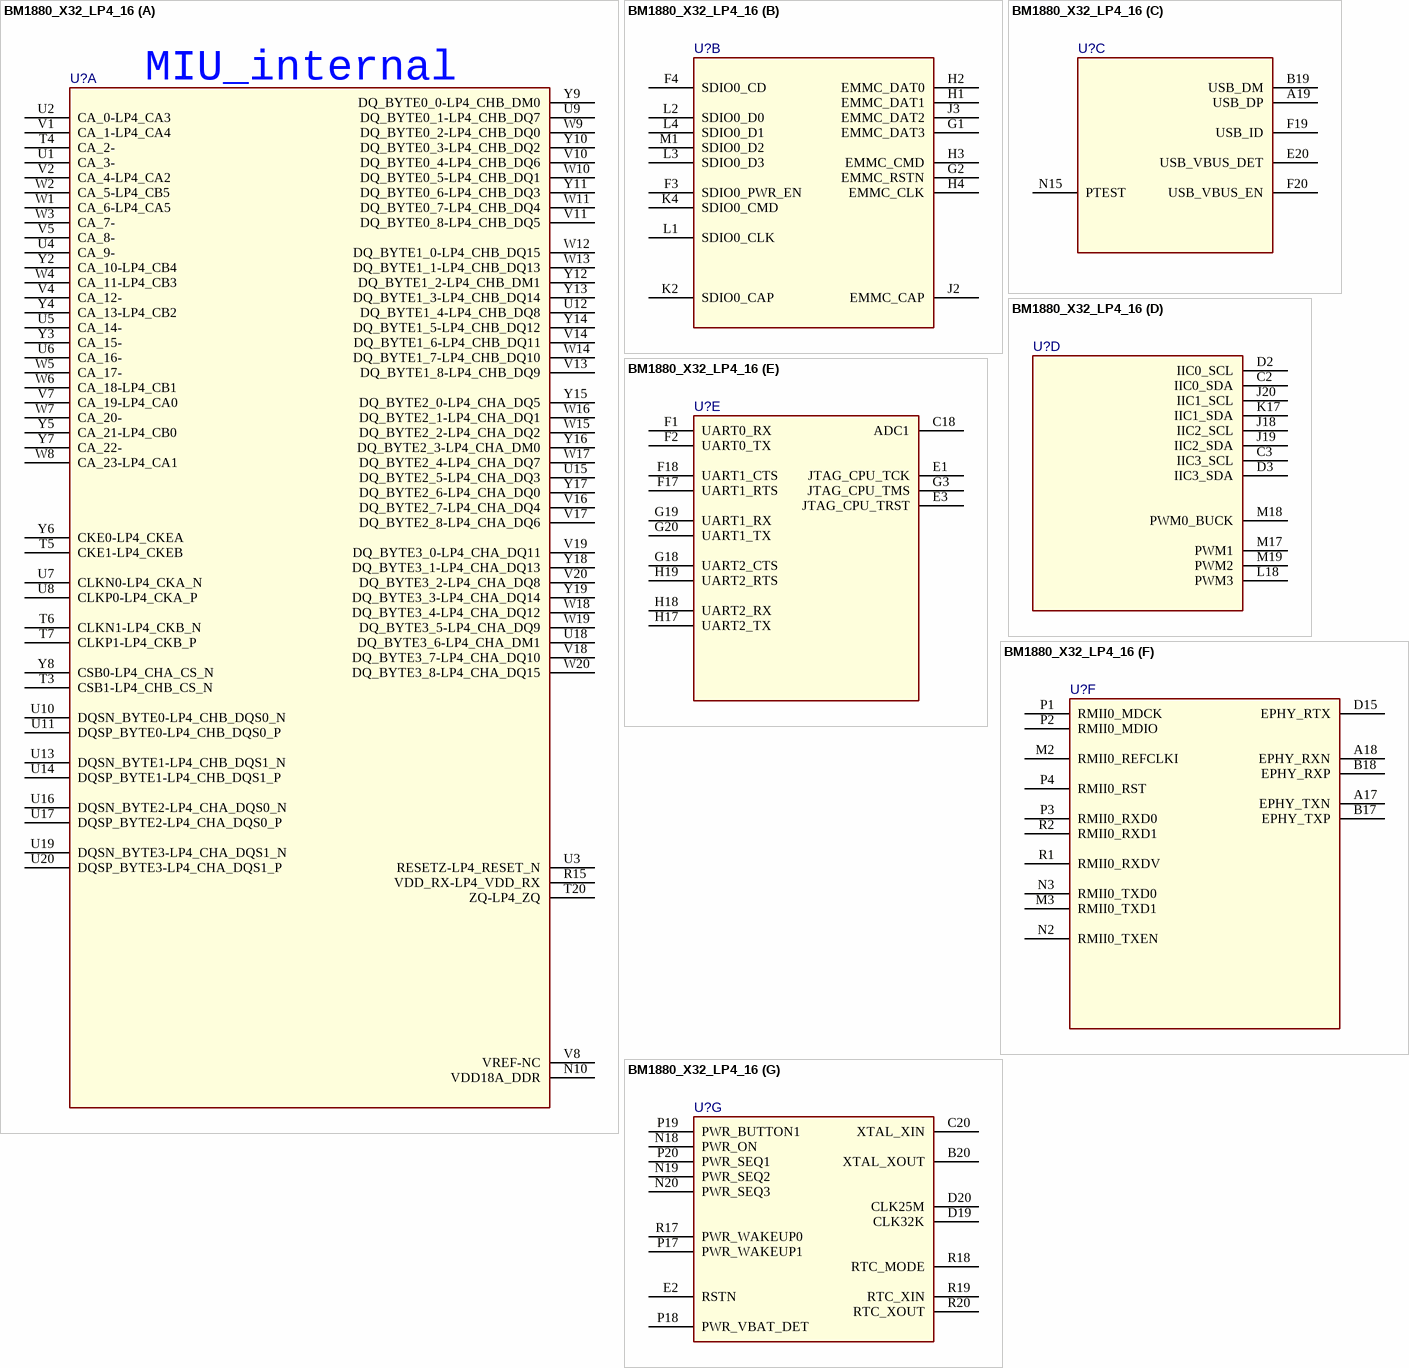
[diagram p30: symbol BM1880_X32_LP4_16]

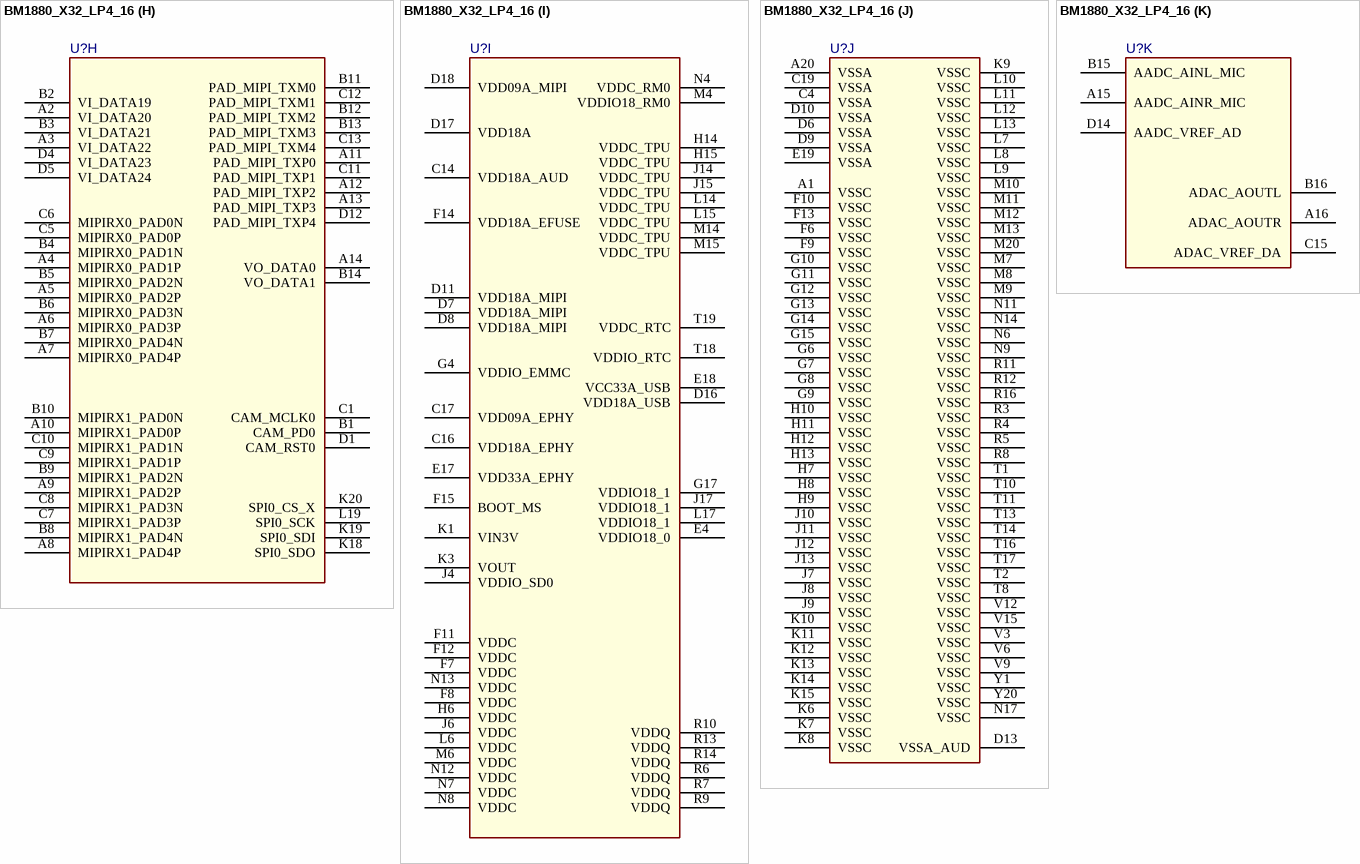
[diagram p31: symbol BM1880_X32_LP4_16]

## BM1880_X32_LP4_16
designator U?
SPLIT_INST: TRUE; SWAP_INFO: (S1+S2+S3+S4+S5+S6+S7+S8+S9+S10)
footprint BGA378-26-2121-socket
part A pins: N10 VDD18A_DDR, R15 VDD_RX-LP4_VDD_RX, T3 CSB1-LP4_CHB_CS_N, T4 CA_2-, T5 CKE1-LP4_CKEB, T6 CLKN1-LP4_CKB_N, T7 CLKP1-LP4_CKB_P, T20 ZQ-LP4_ZQ, U1 CA_3-, U2 CA_0-LP4_CA3, U3 RESETZ-LP4_RESET_N, U4 CA_9-, U5 CA_14-, U6 CA_16-, U7 CLKN0-LP4_CKA_N, U8 CLKP0-LP4_CKA_P, U9 DQ_BYTE0_1-LP4_CHB_DQ7, U10 DQSN_BYTE0-LP4_CHB_DQS0_N, U11 DQSP_BYTE0-LP4_CHB_DQS0_P, U12 DQ_BYTE1_4-LP4_CHB_DQ8, U13 DQSN_BYTE1-LP4_CHB_DQS1_N, U14 DQSP_BYTE1-LP4_CHB_DQS1_P, U15 DQ_BYTE2_5-LP4_CHA_DQ3, U16 DQSN_BYTE2-LP4_CHA_DQS0_N, U17 DQSP_BYTE2-LP4_CHA_DQS0_P, U18 DQ_BYTE3_6-LP4_CHA_DM1, U19 DQSN_BYTE3-LP4_CHA_DQS1_N, U20 DQSP_BYTE3-LP4_CHA_DQS1_P, V1 CA_1-LP4_CA4, V2 CA_4-LP4_CA2, V4 CA_12-, V5 CA_8-, V7 CA_19-LP4_CA0, V8 VREF-NC, V10 DQ_BYTE0_4-LP4_CHB_DQ6, V11 DQ_BYTE0_8-LP4_CHB_DQ5, V13 DQ_BYTE1_8-LP4_CHB_DQ9, V14 DQ_BYTE1_6-LP4_CHB_DQ11, V16 DQ_BYTE2_7-LP4_CHA_DQ4, V17 DQ_BYTE2_8-LP4_CHA_DQ6, V18 DQ_BYTE3_7-LP4_CHA_DQ10, V19 DQ_BYTE3_0-LP4_CHA_DQ11, V20 DQ_BYTE3_2-LP4_CHA_DQ8, W1 CA_6-LP4_CA5, W2 CA_5-LP4_CB5, W3 CA_7-, W4 CA_11-LP4_CB3, W5 CA_17-, W6 CA_18-LP4_CB1, W7 CA_20-, W8 CA_23-LP4_CA1, W9 DQ_BYTE0_2-LP4_CHB_DQ0, W10 DQ_BYTE0_5-LP4_CHB_DQ1, W11 DQ_BYTE0_7-LP4_CHB_DQ4, W12 DQ_BYTE1_0-LP4_CHB_DQ15, W13 DQ_BYTE1_1-LP4_CHB_DQ13, W14 DQ_BYTE1_7-LP4_CHB_DQ10, W15 DQ_BYTE2_2-LP4_CHA_DQ2, W16 DQ_BYTE2_1-LP4_CHA_DQ1, W17 DQ_BYTE2_4-LP4_CHA_DQ7, W18 DQ_BYTE3_4-LP4_CHA_DQ12, W19 DQ_BYTE3_5-LP4_CHA_DQ9, W20 DQ_BYTE3_8-LP4_CHA_DQ15, Y2 CA_10-LP4_CB4, Y3 CA_15-, Y4 CA_13-LP4_CB2, Y5 CA_21-LP4_CB0, Y6 CKE0-LP4_CKEA, Y7 CA_22-, Y8 CSB0-LP4_CHA_CS_N, Y9 DQ_BYTE0_0-LP4_CHB_DM0, Y10 DQ_BYTE0_3-LP4_CHB_DQ2, Y11 DQ_BYTE0_6-LP4_CHB_DQ3, Y12 DQ_BYTE1_2-LP4_CHB_DM1, Y13 DQ_BYTE1_3-LP4_CHB_DQ14, Y14 DQ_BYTE1_5-LP4_CHB_DQ12, Y15 DQ_BYTE2_0-LP4_CHA_DQ5, Y16 DQ_BYTE2_3-LP4_CHA_DM0, Y17 DQ_BYTE2_6-LP4_CHA_DQ0, Y18 DQ_BYTE3_1-LP4_CHA_DQ13, Y19 DQ_BYTE3_3-LP4_CHA_DQ14
part B pins: F3 SDIO0_PWR_EN, F4 SDIO0_CD, G1 EMMC_DAT3, G2 EMMC_RSTN, H1 EMMC_DAT1, H2 EMMC_DAT0, H3 EMMC_CMD, H4 EMMC_CLK, J2 EMMC_CAP, J3 EMMC_DAT2, K2 SDIO0_CAP, K4 SDIO0_CMD, L1 SDIO0_CLK, L2 SDIO0_D0, L3 SDIO0_D3, L4 SDIO0_D1, M1 SDIO0_D2
part C pins: A19 USB_DP (power), B19 USB_DM (power), E20 USB_VBUS_DET (power), F19 USB_ID (power), F20 USB_VBUS_EN, N15 PTEST
part D pins: C2 IIC0_SDA, C3 IIC3_SCL, D2 IIC0_SCL, D3 IIC3_SDA, J18 IIC2_SCL, J19 IIC2_SDA, J20 IIC1_SCL, K17 IIC1_SDA, L18 PWM3, M17 PWM1, M18 PWM0_BUCK, M19 PWM2
part E pins: C18 ADC1, E1 JTAG_CPU_TCK, E3 JTAG_CPU_TRST, F1 UART0_RX, F2 UART0_TX, F17 UART1_RTS, F18 UART1_CTS, G3 JTAG_CPU_TMS, G18 UART2_CTS, G19 UART1_RX, G20 UART1_TX, H17 UART2_TX, H18 UART2_RX, H19 UART2_RTS
part F pins: A17 EPHY_TXN, A18 EPHY_RXN, B17 EPHY_TXP, B18 EPHY_RXP, D15 EPHY_RTX, M2 RMII0_REFCLKI, M3 RMII0_TXD1, N2 RMII0_TXEN, N3 RMII0_TXD0, P1 RMII0_MDCK, P2 RMII0_MDIO, P3 RMII0_RXD0, P4 RMII0_RST, R1 RMII0_RXDV, R2 RMII0_RXD1
part G pins: B20 XTAL_XOUT, C20 XTAL_XIN, D19 CLK32K, D20 CLK25M, E2 RSTN, N18 PWR_ON, N19 PWR_SEQ2, N20 PWR_SEQ3, P17 PWR_WAKEUP1, P18 PWR_VBAT_DET, P19 PWR_BUTTON1, P20 PWR_SEQ1, R17 PWR_WAKEUP0, R18 RTC_MODE, R19 RTC_XIN, R20 RTC_XOUT
part H pins: A2 VI_DATA20 (power), A3 VI_DATA22 (power), A4 MIPIRX0_PAD1P (power), A5 MIPIRX0_PAD2P (power), A6 MIPIRX0_PAD3P (power), A7 MIPIRX0_PAD4P (power), A8 MIPIRX1_PAD4P (power), A9 MIPIRX1_PAD2P (power), A10 MIPIRX1_PAD0P (power), A11 PAD_MIPI_TXP0 (power), A12 PAD_MIPI_TXP2 (power), A13 PAD_MIPI_TXP3 (power), A14 VO_DATA0 (power), B1 CAM_PD0, B2 VI_DATA19 (power), B3 VI_DATA21 (power), B4 MIPIRX0_PAD1N (power), B5 MIPIRX0_PAD2N (power), B6 MIPIRX0_PAD3N (power), B7 MIPIRX0_PAD4N (power), B8 MIPIRX1_PAD4N (power), B9 MIPIRX1_PAD2N (power), B10 MIPIRX1_PAD0N (power), B11 PAD_MIPI_TXM0 (power), B12 PAD_MIPI_TXM2 (power), B13 PAD_MIPI_TXM3 (power), B14 VO_DATA1 (power), C1 CAM_MCLK0, C5 MIPIRX0_PAD0P (power), C6 MIPIRX0_PAD0N (power), C7 MIPIRX1_PAD3P (power), C8 MIPIRX1_PAD3N (power), C9 MIPIRX1_PAD1P (power), C10 MIPIRX1_PAD1N (power), C11 PAD_MIPI_TXP1 (power), C12 PAD_MIPI_TXM1 (power), C13 PAD_MIPI_TXM4 (power), D1 CAM_RST0, D4 VI_DATA23 (power), D5 VI_DATA24 (power), D12 PAD_MIPI_TXP4 (power), K18 SPI0_SDO, K19 SPI0_SDI, K20 SPI0_CS_X, L19 SPI0_SCK
part I pins: C14 VDD18A_AUD (power), C16 VDD18A_EPHY (power), C17 VDD09A_EPHY (power), D7 VDD18A_MIPI (power), D8 VDD18A_MIPI (power), D11 VDD18A_MIPI (power), D16 VDD18A_USB, D17 VDD18A (power), D18 VDD09A_MIPI (power), E4 VDDIO18_0 (power), E17 VDD33A_EPHY (power), E18 VCC33A_USB, F7 VDDC (power), F8 VDDC (power), F11 VDDC (power), F12 VDDC (power), F14 VDD18A_EFUSE (power), F15 BOOT_MS, G4 VDDIO_EMMC (power), G17 VDDIO18_1 (power), H6 VDDC (power), H14 VDDC_TPU (power), H15 VDDC_TPU (power), J4 VDDIO_SD0 (power), J6 VDDC (power), J14 VDDC_TPU (power), J15 VDDC_TPU (power), J17 VDDIO18_1 (power), K1 VIN3V (power), K3 VOUT (power), L6 VDDC (power), L14 VDDC_TPU (power), L15 VDDC_TPU (power), L17 VDDIO18_1 (power), M4 VDDIO18_RM0 (power), M6 VDDC (power), M14 VDDC_TPU (power), M15 VDDC_TPU (power), N4 VDDC_RM0 (power), N7 VDDC (power), N8 VDDC (power), N12 VDDC (power), N13 VDDC (power), R6 VDDQ (power), R7 VDDQ (power), R9 VDDQ (power), R10 VDDQ (power), R13 VDDQ (power), R14 VDDQ (power), T18 VDDIO_RTC (power), T19 VDDC_RTC (power)
part J pins: A1 VSSC (power), A20 VSSA (power), C4 VSSA (power), C19 VSSA (power), D6 VSSA (power), D9 VSSA (power), D10 VSSA (power), D13 VSSA_AUD (power), E19 VSSA (power), F6 VSSC (power), F9 VSSC (power), F10 VSSC (power), F13 VSSC (power), G6 VSSC (power), G7 VSSC (power), G8 VSSC (power), G9 VSSC (power), G10 VSSC (power), G11 VSSC (power), G12 VSSC (power), G13 VSSC (power), G14 VSSC (power), G15 VSSC (power), H7 VSSC (power), H8 VSSC (power), H9 VSSC (power), H10 VSSC (power), H11 VSSC (power), H12 VSSC (power), H13 VSSC (power), J7 VSSC (power), J8 VSSC (power), J9 VSSC (power), J10 VSSC (power), J11 VSSC (power), J12 VSSC (power), J13 VSSC (power), K6 VSSC (power), K7 VSSC (power), K8 VSSC (power), K9 VSSC (power), K10 VSSC (power), K11 VSSC (power), K12 VSSC (power), K13 VSSC (power), K14 VSSC (power), K15 VSSC (power), L7 VSSC (power), L8 VSSC (power), L9 VSSC (power), L10 VSSC (power), L11 VSSC (power), L12 VSSC (power), L13 VSSC (power), M7 VSSC (power), M8 VSSC (power), M9 VSSC (power), M10 VSSC (power), M11 VSSC (power), M12 VSSC (power), M13 VSSC (power), M20 VSSC (power), N6 VSSC (power), N9 VSSC (power), N11 VSSC (power), N14 VSSC (power), N17 VSSC (power), R3 VSSC (power), R4 VSSC (power), R5 VSSC (power), R8 VSSC (power), R11 VSSC (power), R12 VSSC (power), R16 VSSC (power), T1 VSSC (power), T2 VSSC (power), T8 VSSC (power), T10 VSSC (power), T11 VSSC (power), T13 VSSC (power), T14 VSSC (power), T16 VSSC (power), T17 VSSC (power), V3 VSSC (power), V6 VSSC (power), V9 VSSC (power), V12 VSSC (power), V15 VSSC (power), Y1 VSSC (power), Y20 VSSC (power)
part K pins: A15 AADC_AINR_MIC, A16 ADAC_AOUTR, B15 AADC_AINL_MIC, B16 ADAC_AOUTL, C15 ADAC_VREF_DA, D14 AADC_VREF_AD
part A text: MIU_internal

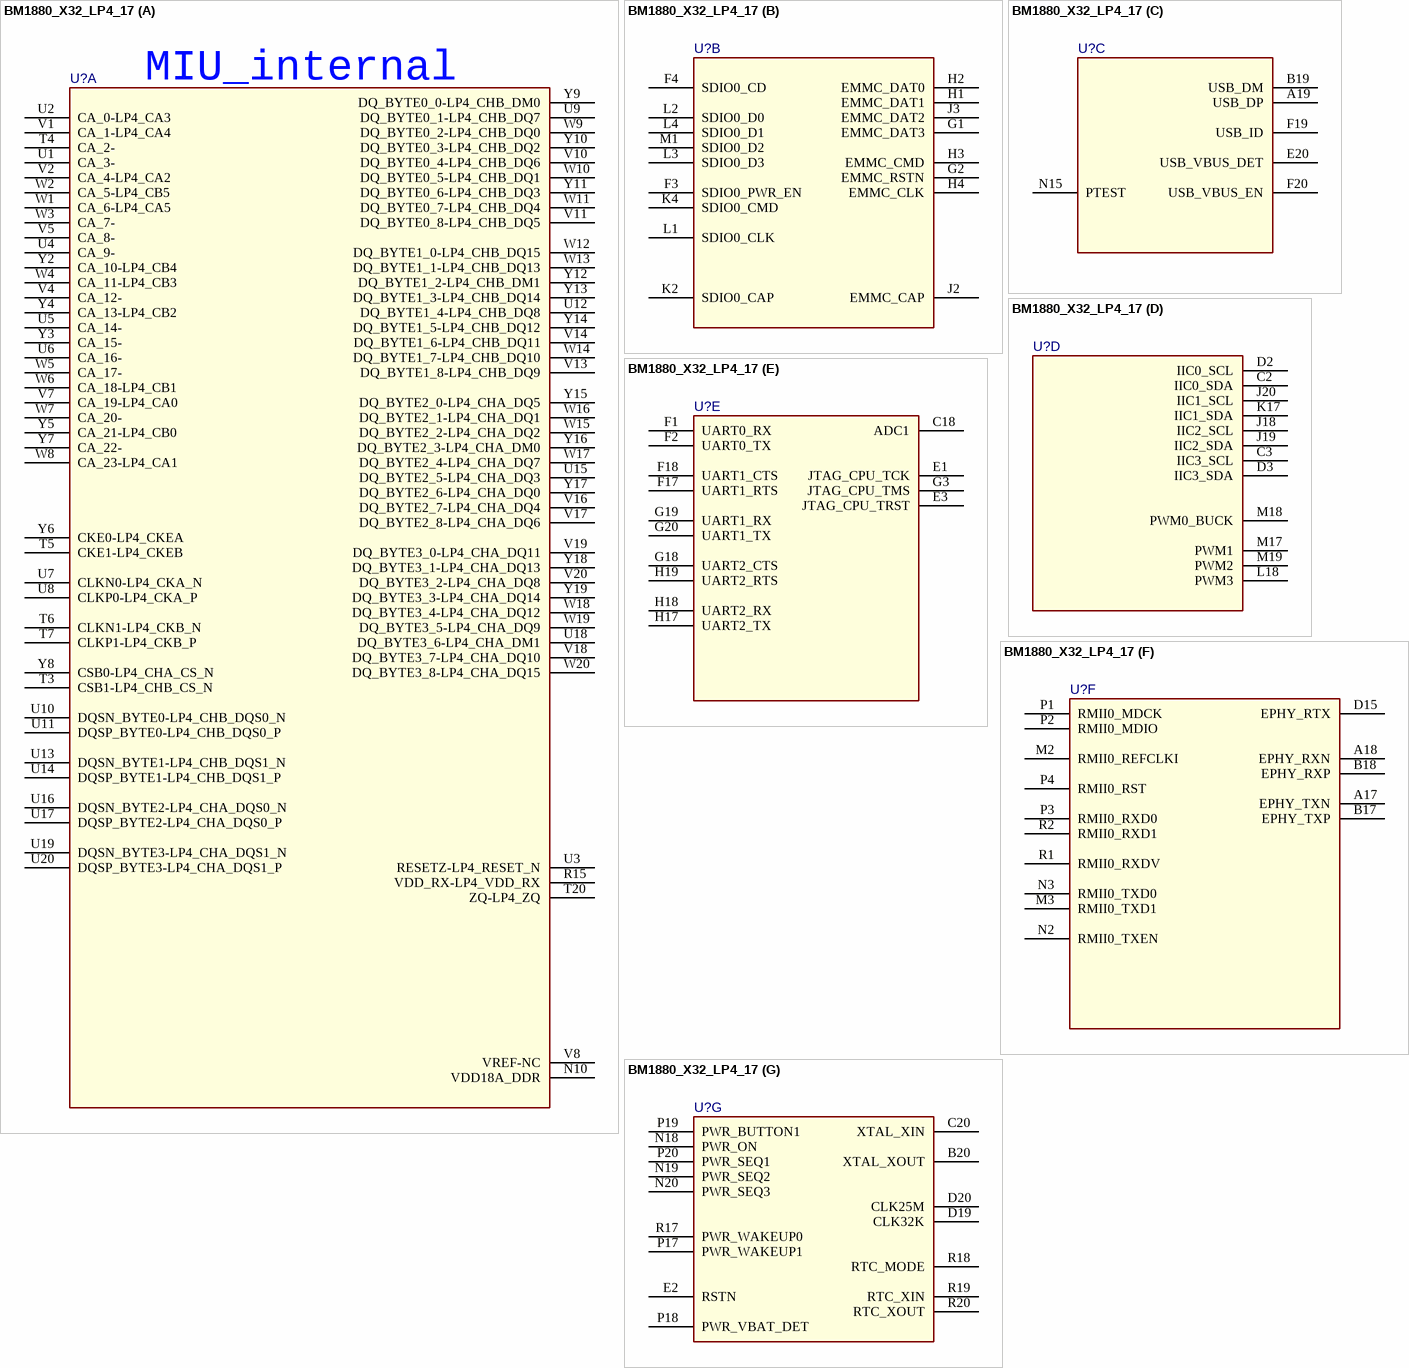
[diagram p32: symbol BM1880_X32_LP4_17]

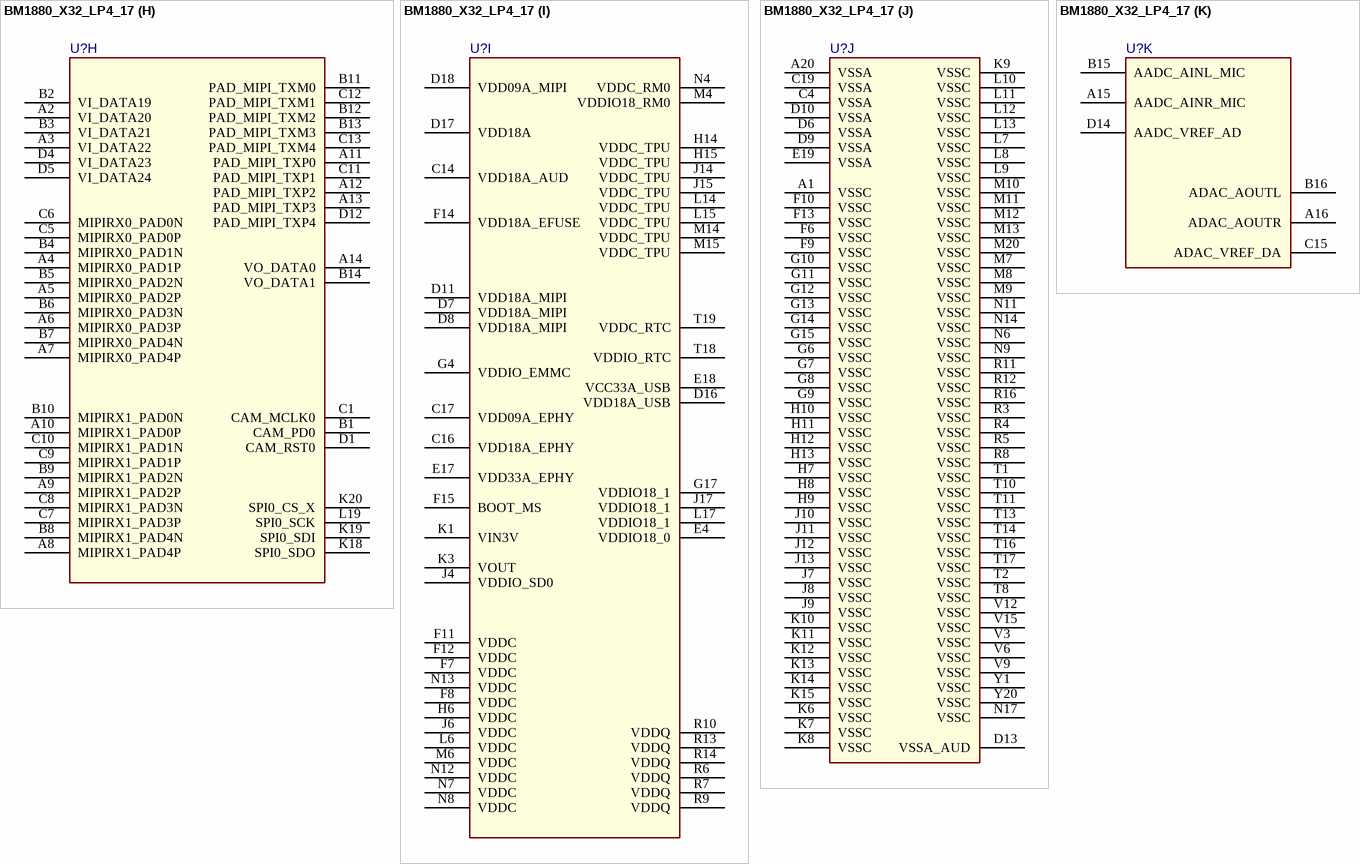
[diagram p33: symbol BM1880_X32_LP4_17]

## BM1880_X32_LP4_17
designator U?
SPLIT_INST: TRUE; SWAP_INFO: (S1+S2+S3+S4+S5+S6+S7+S8+S9+S10)
footprint BGA378-26-2121-socket
part A pins: N10 VDD18A_DDR, R15 VDD_RX-LP4_VDD_RX, T3 CSB1-LP4_CHB_CS_N, T4 CA_2-, T5 CKE1-LP4_CKEB, T6 CLKN1-LP4_CKB_N, T7 CLKP1-LP4_CKB_P, T20 ZQ-LP4_ZQ, U1 CA_3-, U2 CA_0-LP4_CA3, U3 RESETZ-LP4_RESET_N, U4 CA_9-, U5 CA_14-, U6 CA_16-, U7 CLKN0-LP4_CKA_N, U8 CLKP0-LP4_CKA_P, U9 DQ_BYTE0_1-LP4_CHB_DQ7, U10 DQSN_BYTE0-LP4_CHB_DQS0_N, U11 DQSP_BYTE0-LP4_CHB_DQS0_P, U12 DQ_BYTE1_4-LP4_CHB_DQ8, U13 DQSN_BYTE1-LP4_CHB_DQS1_N, U14 DQSP_BYTE1-LP4_CHB_DQS1_P, U15 DQ_BYTE2_5-LP4_CHA_DQ3, U16 DQSN_BYTE2-LP4_CHA_DQS0_N, U17 DQSP_BYTE2-LP4_CHA_DQS0_P, U18 DQ_BYTE3_6-LP4_CHA_DM1, U19 DQSN_BYTE3-LP4_CHA_DQS1_N, U20 DQSP_BYTE3-LP4_CHA_DQS1_P, V1 CA_1-LP4_CA4, V2 CA_4-LP4_CA2, V4 CA_12-, V5 CA_8-, V7 CA_19-LP4_CA0, V8 VREF-NC, V10 DQ_BYTE0_4-LP4_CHB_DQ6, V11 DQ_BYTE0_8-LP4_CHB_DQ5, V13 DQ_BYTE1_8-LP4_CHB_DQ9, V14 DQ_BYTE1_6-LP4_CHB_DQ11, V16 DQ_BYTE2_7-LP4_CHA_DQ4, V17 DQ_BYTE2_8-LP4_CHA_DQ6, V18 DQ_BYTE3_7-LP4_CHA_DQ10, V19 DQ_BYTE3_0-LP4_CHA_DQ11, V20 DQ_BYTE3_2-LP4_CHA_DQ8, W1 CA_6-LP4_CA5, W2 CA_5-LP4_CB5, W3 CA_7-, W4 CA_11-LP4_CB3, W5 CA_17-, W6 CA_18-LP4_CB1, W7 CA_20-, W8 CA_23-LP4_CA1, W9 DQ_BYTE0_2-LP4_CHB_DQ0, W10 DQ_BYTE0_5-LP4_CHB_DQ1, W11 DQ_BYTE0_7-LP4_CHB_DQ4, W12 DQ_BYTE1_0-LP4_CHB_DQ15, W13 DQ_BYTE1_1-LP4_CHB_DQ13, W14 DQ_BYTE1_7-LP4_CHB_DQ10, W15 DQ_BYTE2_2-LP4_CHA_DQ2, W16 DQ_BYTE2_1-LP4_CHA_DQ1, W17 DQ_BYTE2_4-LP4_CHA_DQ7, W18 DQ_BYTE3_4-LP4_CHA_DQ12, W19 DQ_BYTE3_5-LP4_CHA_DQ9, W20 DQ_BYTE3_8-LP4_CHA_DQ15, Y2 CA_10-LP4_CB4, Y3 CA_15-, Y4 CA_13-LP4_CB2, Y5 CA_21-LP4_CB0, Y6 CKE0-LP4_CKEA, Y7 CA_22-, Y8 CSB0-LP4_CHA_CS_N, Y9 DQ_BYTE0_0-LP4_CHB_DM0, Y10 DQ_BYTE0_3-LP4_CHB_DQ2, Y11 DQ_BYTE0_6-LP4_CHB_DQ3, Y12 DQ_BYTE1_2-LP4_CHB_DM1, Y13 DQ_BYTE1_3-LP4_CHB_DQ14, Y14 DQ_BYTE1_5-LP4_CHB_DQ12, Y15 DQ_BYTE2_0-LP4_CHA_DQ5, Y16 DQ_BYTE2_3-LP4_CHA_DM0, Y17 DQ_BYTE2_6-LP4_CHA_DQ0, Y18 DQ_BYTE3_1-LP4_CHA_DQ13, Y19 DQ_BYTE3_3-LP4_CHA_DQ14
part B pins: F3 SDIO0_PWR_EN, F4 SDIO0_CD, G1 EMMC_DAT3, G2 EMMC_RSTN, H1 EMMC_DAT1, H2 EMMC_DAT0, H3 EMMC_CMD, H4 EMMC_CLK, J2 EMMC_CAP, J3 EMMC_DAT2, K2 SDIO0_CAP, K4 SDIO0_CMD, L1 SDIO0_CLK, L2 SDIO0_D0, L3 SDIO0_D3, L4 SDIO0_D1, M1 SDIO0_D2
part C pins: A19 USB_DP (power), B19 USB_DM (power), E20 USB_VBUS_DET (power), F19 USB_ID (power), F20 USB_VBUS_EN, N15 PTEST
part D pins: C2 IIC0_SDA, C3 IIC3_SCL, D2 IIC0_SCL, D3 IIC3_SDA, J18 IIC2_SCL, J19 IIC2_SDA, J20 IIC1_SCL, K17 IIC1_SDA, L18 PWM3, M17 PWM1, M18 PWM0_BUCK, M19 PWM2
part E pins: C18 ADC1, E1 JTAG_CPU_TCK, E3 JTAG_CPU_TRST, F1 UART0_RX, F2 UART0_TX, F17 UART1_RTS, F18 UART1_CTS, G3 JTAG_CPU_TMS, G18 UART2_CTS, G19 UART1_RX, G20 UART1_TX, H17 UART2_TX, H18 UART2_RX, H19 UART2_RTS
part F pins: A17 EPHY_TXN, A18 EPHY_RXN, B17 EPHY_TXP, B18 EPHY_RXP, D15 EPHY_RTX, M2 RMII0_REFCLKI, M3 RMII0_TXD1, N2 RMII0_TXEN, N3 RMII0_TXD0, P1 RMII0_MDCK, P2 RMII0_MDIO, P3 RMII0_RXD0, P4 RMII0_RST, R1 RMII0_RXDV, R2 RMII0_RXD1
part G pins: B20 XTAL_XOUT, C20 XTAL_XIN, D19 CLK32K, D20 CLK25M, E2 RSTN, N18 PWR_ON, N19 PWR_SEQ2, N20 PWR_SEQ3, P17 PWR_WAKEUP1, P18 PWR_VBAT_DET, P19 PWR_BUTTON1, P20 PWR_SEQ1, R17 PWR_WAKEUP0, R18 RTC_MODE, R19 RTC_XIN, R20 RTC_XOUT
part H pins: A2 VI_DATA20 (power), A3 VI_DATA22 (power), A4 MIPIRX0_PAD1P (power), A5 MIPIRX0_PAD2P (power), A6 MIPIRX0_PAD3P (power), A7 MIPIRX0_PAD4P (power), A8 MIPIRX1_PAD4P (power), A9 MIPIRX1_PAD2P (power), A10 MIPIRX1_PAD0P (power), A11 PAD_MIPI_TXP0 (power), A12 PAD_MIPI_TXP2 (power), A13 PAD_MIPI_TXP3 (power), A14 VO_DATA0 (power), B1 CAM_PD0, B2 VI_DATA19 (power), B3 VI_DATA21 (power), B4 MIPIRX0_PAD1N (power), B5 MIPIRX0_PAD2N (power), B6 MIPIRX0_PAD3N (power), B7 MIPIRX0_PAD4N (power), B8 MIPIRX1_PAD4N (power), B9 MIPIRX1_PAD2N (power), B10 MIPIRX1_PAD0N (power), B11 PAD_MIPI_TXM0 (power), B12 PAD_MIPI_TXM2 (power), B13 PAD_MIPI_TXM3 (power), B14 VO_DATA1 (power), C1 CAM_MCLK0, C5 MIPIRX0_PAD0P (power), C6 MIPIRX0_PAD0N (power), C7 MIPIRX1_PAD3P (power), C8 MIPIRX1_PAD3N (power), C9 MIPIRX1_PAD1P (power), C10 MIPIRX1_PAD1N (power), C11 PAD_MIPI_TXP1 (power), C12 PAD_MIPI_TXM1 (power), C13 PAD_MIPI_TXM4 (power), D1 CAM_RST0, D4 VI_DATA23 (power), D5 VI_DATA24 (power), D12 PAD_MIPI_TXP4 (power), K18 SPI0_SDO, K19 SPI0_SDI, K20 SPI0_CS_X, L19 SPI0_SCK
part I pins: C14 VDD18A_AUD (power), C16 VDD18A_EPHY (power), C17 VDD09A_EPHY (power), D7 VDD18A_MIPI (power), D8 VDD18A_MIPI (power), D11 VDD18A_MIPI (power), D16 VDD18A_USB, D17 VDD18A (power), D18 VDD09A_MIPI (power), E4 VDDIO18_0 (power), E17 VDD33A_EPHY (power), E18 VCC33A_USB, F7 VDDC (power), F8 VDDC (power), F11 VDDC (power), F12 VDDC (power), F14 VDD18A_EFUSE (power), F15 BOOT_MS, G4 VDDIO_EMMC (power), G17 VDDIO18_1 (power), H6 VDDC (power), H14 VDDC_TPU (power), H15 VDDC_TPU (power), J4 VDDIO_SD0 (power), J6 VDDC (power), J14 VDDC_TPU (power), J15 VDDC_TPU (power), J17 VDDIO18_1 (power), K1 VIN3V (power), K3 VOUT (power), L6 VDDC (power), L14 VDDC_TPU (power), L15 VDDC_TPU (power), L17 VDDIO18_1 (power), M4 VDDIO18_RM0 (power), M6 VDDC (power), M14 VDDC_TPU (power), M15 VDDC_TPU (power), N4 VDDC_RM0 (power), N7 VDDC (power), N8 VDDC (power), N12 VDDC (power), N13 VDDC (power), R6 VDDQ (power), R7 VDDQ (power), R9 VDDQ (power), R10 VDDQ (power), R13 VDDQ (power), R14 VDDQ (power), T18 VDDIO_RTC (power), T19 VDDC_RTC (power)
part J pins: A1 VSSC, A20 VSSA, C4 VSSA, C19 VSSA, D6 VSSA, D9 VSSA, D10 VSSA, D13 VSSA_AUD, E19 VSSA, F6 VSSC, F9 VSSC, F10 VSSC, F13 VSSC, G6 VSSC, G7 VSSC, G8 VSSC, G9 VSSC, G10 VSSC, G11 VSSC, G12 VSSC, G13 VSSC, G14 VSSC, G15 VSSC, H7 VSSC, H8 VSSC, H9 VSSC, H10 VSSC, H11 VSSC, H12 VSSC, H13 VSSC, J7 VSSC, J8 VSSC, J9 VSSC, J10 VSSC, J11 VSSC, J12 VSSC, J13 VSSC, K6 VSSC, K7 VSSC, K8 VSSC, K9 VSSC, K10 VSSC, K11 VSSC, K12 VSSC, K13 VSSC, K14 VSSC, K15 VSSC, L7 VSSC, L8 VSSC, L9 VSSC, L10 VSSC, L11 VSSC, L12 VSSC, L13 VSSC, M7 VSSC, M8 VSSC, M9 VSSC, M10 VSSC, M11 VSSC, M12 VSSC, M13 VSSC, M20 VSSC, N6 VSSC, N9 VSSC, N11 VSSC, N14 VSSC, N17 VSSC, R3 VSSC, R4 VSSC, R5 VSSC, R8 VSSC, R11 VSSC, R12 VSSC, R16 VSSC, T1 VSSC, T2 VSSC, T8 VSSC, T10 VSSC, T11 VSSC, T13 VSSC, T14 VSSC, T16 VSSC, T17 VSSC, V3 VSSC, V6 VSSC, V9 VSSC, V12 VSSC, V15 VSSC, Y1 VSSC, Y20 VSSC
part K pins: A15 AADC_AINR_MIC, A16 ADAC_AOUTR, B15 AADC_AINL_MIC, B16 ADAC_AOUTL, C15 ADAC_VREF_DA, D14 AADC_VREF_AD
part A text: MIU_internal

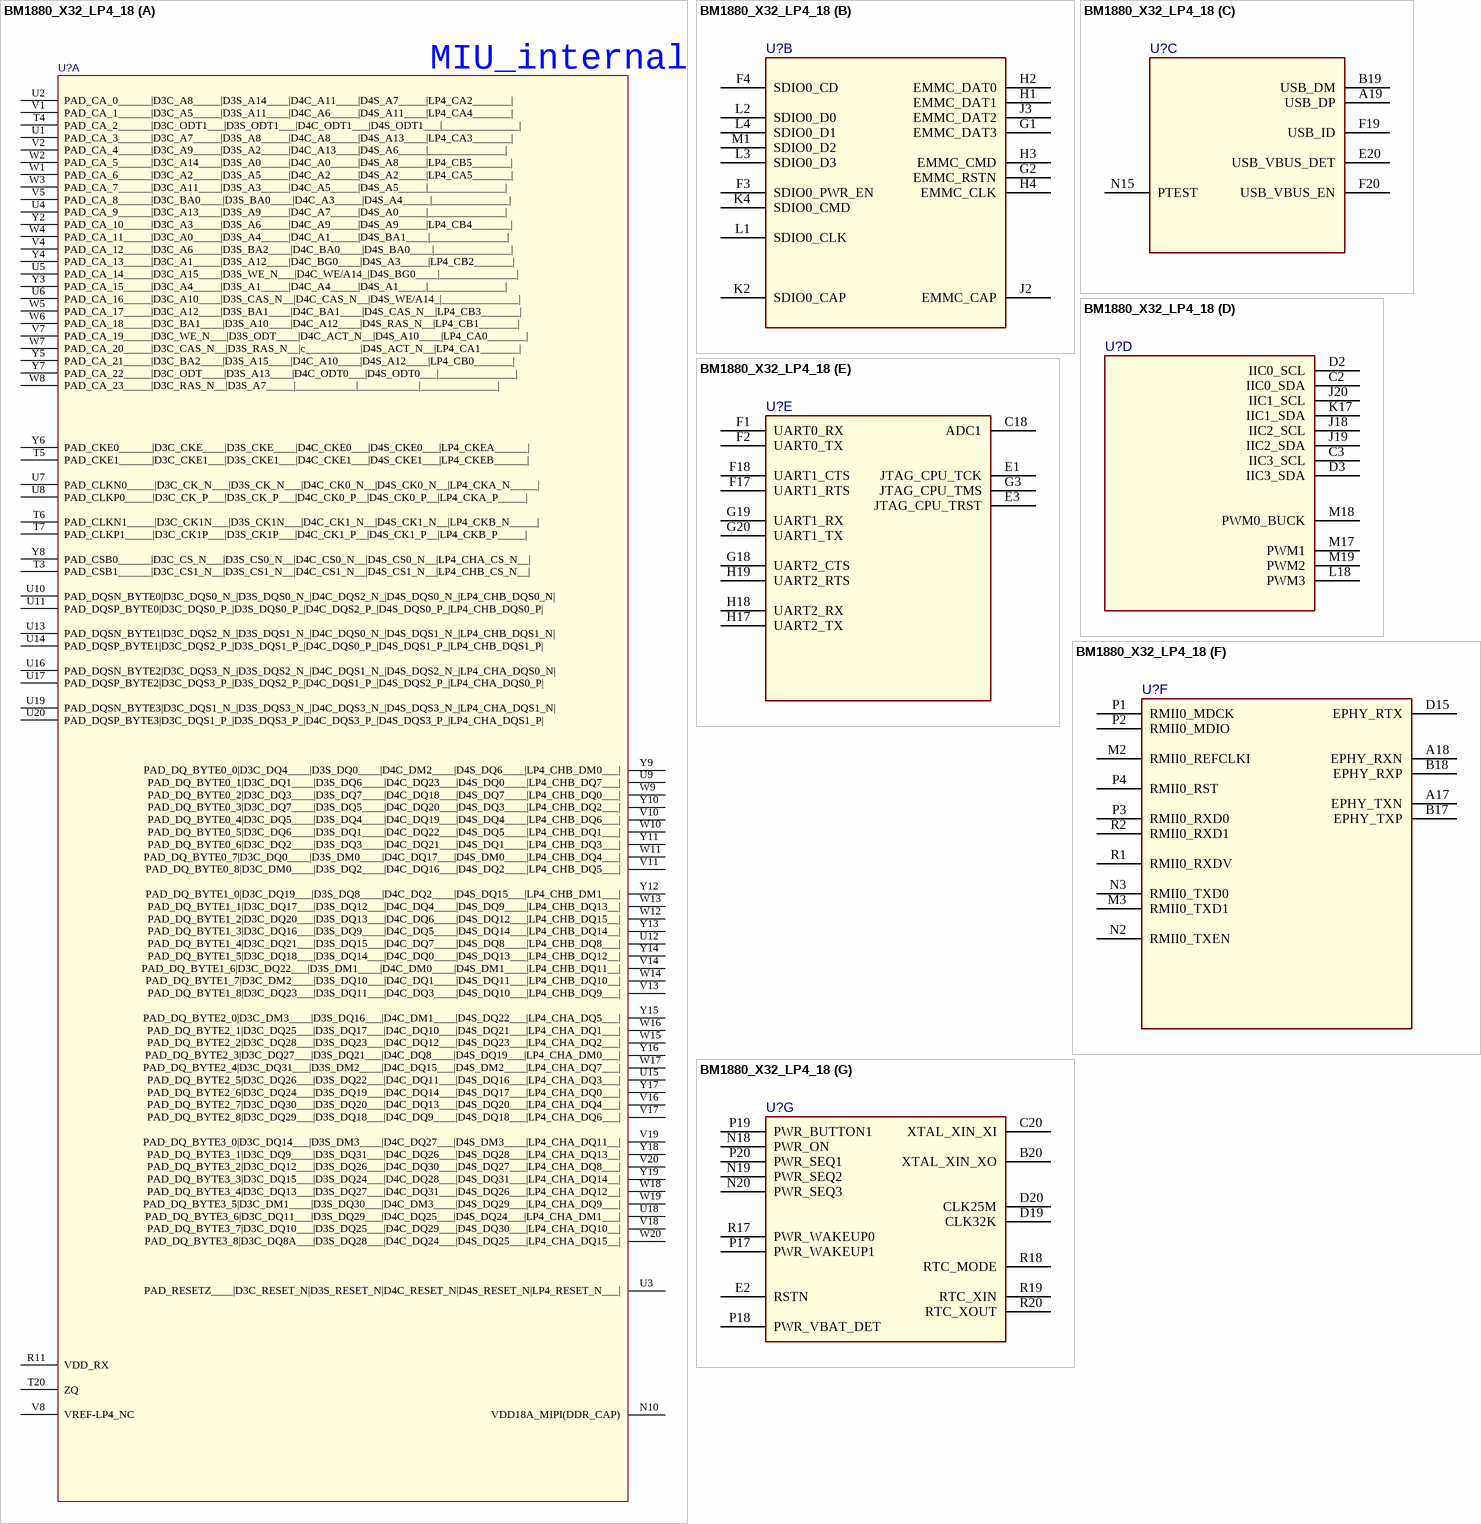
[diagram p34: symbol BM1880_X32_LP4_18]

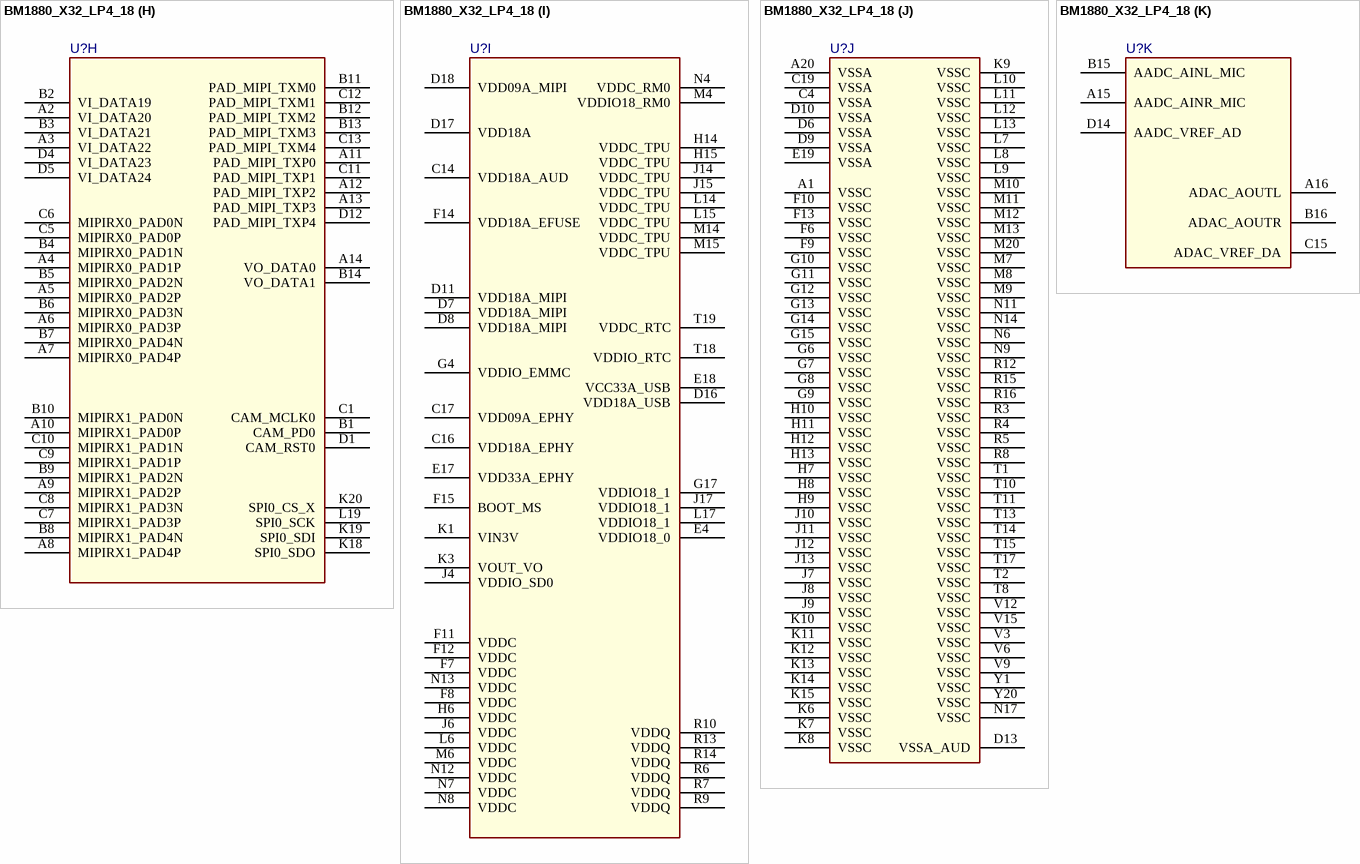
[diagram p35: symbol BM1880_X32_LP4_18]

## BM1880_X32_LP4_18
designator U?
SWAP_INFO: (S1+S2+S3+S4+S5+S6+S7+S8+S9+S10); SPLIT_INST: TRUE
footprint BGA378-26-2121-socket
part A pins: N10 VDD18A_MIPI(DDR_CAP), R11 VDD_RX, T3 PAD_CSB1______|D3C_CS1_N__|D3S_CS1_N__|D4C_CS1_N__|D4S_CS1_N__|LP4_CHB_CS_N__|, T4 PAD_CA_2______|D3C_ODT1___|D3S_ODT1___|D4C_ODT1___|D4S_ODT1___|______________|, T5 PAD_CKE1______|D3C_CKE1___|D3S_CKE1___|D4C_CKE1___|D4S_CKE1___|LP4_CKEB______|, T6 PAD_CLKN1_____|D3C_CK1N___|D3S_CK1N___|D4C_CK1_N__|D4S_CK1_N__|LP4_CKB_N_____|, T7 PAD_CLKP1_____|D3C_CK1P___|D3S_CK1P___|D4C_CK1_P__|D4S_CK1_P__|LP4_CKB_P_____|, T20 ZQ, U1 PAD_CA_3______|D3C_A7_____|D3S_A8_____|D4C_A8_____|D4S_A13____|LP4_CA3_______|, U2 PAD_CA_0______|D3C_A8_____|D3S_A14____|D4C_A11____|D4S_A7_____|LP4_CA2_______|, U3 PAD_RESETZ____|D3C_RESET_N|D3S_RESET_N|D4C_RESET_N|D4S_RESET_N|LP4_RESET_N___|, U4 PAD_CA_9______|D3C_A13____|D3S_A9_____|D4C_A7_____|D4S_A0_____|______________|, U5 PAD_CA_14_____|D3C_A15____|D3S_WE_N___|D4C_WE/A14_|D4S_BG0____|______________|, U6 PAD_CA_16_____|D3C_A10____|D3S_CAS_N__|D4C_CAS_N__|D4S_WE/A14_|______________|, U7 PAD_CLKN0_____|D3C_CK_N___|D3S_CK_N___|D4C_CK0_N__|D4S_CK0_N__|LP4_CKA_N_____|, U8 PAD_CLKP0_____|D3C_CK_P___|D3S_CK_P___|D4C_CK0_P__|D4S_CK0_P__|LP4_CKA_P_____|, U9 PAD_DQ_BYTE0_1|D3C_DQ1____|D3S_DQ6____|D4C_DQ23___|D4S_DQ0____|LP4_CHB_DQ7___|, U10 PAD_DQSN_BYTE0|D3C_DQS0_N_|D3S_DQS0_N_|D4C_DQS2_N_|D4S_DQS0_N_|LP4_CHB_DQS0_N|, U11 PAD_DQSP_BYTE0|D3C_DQS0_P_|D3S_DQS0_P_|D4C_DQS2_P_|D4S_DQS0_P_|LP4_CHB_DQS0_P|, U12 PAD_DQ_BYTE1_4|D3C_DQ21___|D3S_DQ15___|D4C_DQ7____|D4S_DQ8____|LP4_CHB_DQ8___|, U13 PAD_DQSN_BYTE1|D3C_DQS2_N_|D3S_DQS1_N_|D4C_DQS0_N_|D4S_DQS1_N_|LP4_CHB_DQS1_N|, U14 PAD_DQSP_BYTE1|D3C_DQS2_P_|D3S_DQS1_P_|D4C_DQS0_P_|D4S_DQS1_P_|LP4_CHB_DQS1_P|, U15 PAD_DQ_BYTE2_5|D3C_DQ26___|D3S_DQ22___|D4C_DQ11___|D4S_DQ16___|LP4_CHA_DQ3___|, U16 PAD_DQSN_BYTE2|D3C_DQS3_N_|D3S_DQS2_N_|D4C_DQS1_N_|D4S_DQS2_N_|LP4_CHA_DQS0_N|, U17 PAD_DQSP_BYTE2|D3C_DQS3_P_|D3S_DQS2_P_|D4C_DQS1_P_|D4S_DQS2_P_|LP4_CHA_DQS0_P|, U18 PAD_DQ_BYTE3_6|D3C_DQ11___|D3S_DQ29___|D4C_DQ25___|D4S_DQ24___|LP4_CHA_DM1___|, U19 PAD_DQSN_BYTE3|D3C_DQS1_N_|D3S_DQS3_N_|D4C_DQS3_N_|D4S_DQS3_N_|LP4_CHA_DQS1_N|, U20 PAD_DQSP_BYTE3|D3C_DQS1_P_|D3S_DQS3_P_|D4C_DQS3_P_|D4S_DQS3_P_|LP4_CHA_DQS1_P|, V1 PAD_CA_1______|D3C_A5_____|D3S_A11____|D4C_A6_____|D4S_A11____|LP4_CA4_______|, V2 PAD_CA_4______|D3C_A9_____|D3S_A2_____|D4C_A13____|D4S_A6_____|______________|, V4 PAD_CA_12_____|D3C_A6_____|D3S_BA2____|D4C_BA0____|D4S_BA0____|______________|, V5 PAD_CA_8______|D3C_BA0____|D3S_BA0____|D4C_A3_____|D4S_A4_____|______________|, V7 PAD_CA_19_____|D3C_WE_N___|D3S_ODT____|D4C_ACT_N__|D4S_A10____|LP4_CA0_______|, V8 VREF-LP4_NC, V10 PAD_DQ_BYTE0_4|D3C_DQ5____|D3S_DQ4____|D4C_DQ19___|D4S_DQ4____|LP4_CHB_DQ6___|, V11 PAD_DQ_BYTE0_8|D3C_DM0____|D3S_DQ2____|D4C_DQ16___|D4S_DQ2____|LP4_CHB_DQ5___|, V13 PAD_DQ_BYTE1_8|D3C_DQ23___|D3S_DQ11___|D4C_DQ3____|D4S_DQ10___|LP4_CHB_DQ9___|, V14 PAD_DQ_BYTE1_6|D3C_DQ22___|D3S_DM1____|D4C_DM0____|D4S_DM1____|LP4_CHB_DQ11__|, V16 PAD_DQ_BYTE2_7|D3C_DQ30___|D3S_DQ20___|D4C_DQ13___|D4S_DQ20___|LP4_CHA_DQ4___|, V17 PAD_DQ_BYTE2_8|D3C_DQ29___|D3S_DQ18___|D4C_DQ9____|D4S_DQ18___|LP4_CHA_DQ6___|, V18 PAD_DQ_BYTE3_7|D3C_DQ10___|D3S_DQ25___|D4C_DQ29___|D4S_DQ30___|LP4_CHA_DQ10__|, V19 PAD_DQ_BYTE3_0|D3C_DQ14___|D3S_DM3____|D4C_DQ27___|D4S_DM3____|LP4_CHA_DQ11__|, V20 PAD_DQ_BYTE3_2|D3C_DQ12___|D3S_DQ26___|D4C_DQ30___|D4S_DQ27___|LP4_CHA_DQ8___|, W1 PAD_CA_6______|D3C_A2_____|D3S_A5_____|D4C_A2_____|D4S_A2_____|LP4_CA5_______|, W2 PAD_CA_5______|D3C_A14____|D3S_A0_____|D4C_A0_____|D4S_A8_____|LP4_CB5_______|, W3 PAD_CA_7______|D3C_A11____|D3S_A3_____|D4C_A5_____|D4S_A5_____|______________|, W4 PAD_CA_11_____|D3C_A0_____|D3S_A4_____|D4C_A1_____|D4S_BA1____|______________|, W5 PAD_CA_17_____|D3C_A12____|D3S_BA1____|D4C_BA1____|D4S_CAS_N__|LP4_CB3_______|, W6 PAD_CA_18_____|D3C_BA1____|D3S_A10____|D4C_A12____|D4S_RAS_N__|LP4_CB1_______|, W7 PAD_CA_20_____|D3C_CAS_N__|D3S_RAS_N__|c__________|D4S_ACT_N__|LP4_CA1_______|, W8 PAD_CA_23_____|D3C_RAS_N__|D3S_A7_____|___________|___________|______________|, W9 PAD_DQ_BYTE0_2|D3C_DQ3____|D3S_DQ7____|D4C_DQ18___|D4S_DQ7____|LP4_CHB_DQ0___|, W10 PAD_DQ_BYTE0_5|D3C_DQ6____|D3S_DQ1____|D4C_DQ22___|D4S_DQ5____|LP4_CHB_DQ1___|, W11 PAD_DQ_BYTE0_7|D3C_DQ0____|D3S_DM0____|D4C_DQ17___|D4S_DM0____|LP4_CHB_DQ4___|, W12 PAD_DQ_BYTE1_2|D3C_DQ20___|D3S_DQ13___|D4C_DQ6____|D4S_DQ12___|LP4_CHB_DQ15__|, W13 PAD_DQ_BYTE1_1|D3C_DQ17___|D3S_DQ12___|D4C_DQ4____|D4S_DQ9____|LP4_CHB_DQ13__|, W14 PAD_DQ_BYTE1_7|D3C_DM2____|D3S_DQ10___|D4C_DQ1____|D4S_DQ11___|LP4_CHB_DQ10__|, W15 PAD_DQ_BYTE2_2|D3C_DQ28___|D3S_DQ23___|D4C_DQ12___|D4S_DQ23___|LP4_CHA_DQ2___|, W16 PAD_DQ_BYTE2_1|D3C_DQ25___|D3S_DQ17___|D4C_DQ10___|D4S_DQ21___|LP4_CHA_DQ1___|, W17 PAD_DQ_BYTE2_4|D3C_DQ31___|D3S_DM2____|D4C_DQ15___|D4S_DM2____|LP4_CHA_DQ7___|, W18 PAD_DQ_BYTE3_4|D3C_DQ13___|D3S_DQ27___|D4C_DQ31___|D4S_DQ26___|LP4_CHA_DQ12__|, W19 PAD_DQ_BYTE3_5|D3C_DM1____|D3S_DQ30___|D4C_DM3____|D4S_DQ29___|LP4_CHA_DQ9___|, W20 PAD_DQ_BYTE3_8|D3C_DQ8A___|D3S_DQ28___|D4C_DQ24___|D4S_DQ25___|LP4_CHA_DQ15__|, Y2 PAD_CA_10_____|D3C_A3_____|D3S_A6_____|D4C_A9_____|D4S_A9_____|LP4_CB4_______|, Y3 PAD_CA_15_____|D3C_A4_____|D3S_A1_____|D4C_A4_____|D4S_A1_____|______________|, Y4 PAD_CA_13_____|D3C_A1_____|D3S_A12____|D4C_BG0____|D4S_A3_____|LP4_CB2_______|, Y5 PAD_CA_21_____|D3C_BA2____|D3S_A15____|D4C_A10____|D4S_A12____|LP4_CB0_______|, Y6 PAD_CKE0______|D3C_CKE____|D3S_CKE____|D4C_CKE0___|D4S_CKE0___|LP4_CKEA______|, Y7 PAD_CA_22_____|D3C_ODT____|D3S_A13____|D4C_ODT0___|D4S_ODT0___|______________|, Y8 PAD_CSB0______|D3C_CS_N___|D3S_CS0_N__|D4C_CS0_N__|D4S_CS0_N__|LP4_CHA_CS_N__|, Y9 PAD_DQ_BYTE0_0|D3C_DQ4____|D3S_DQ0____|D4C_DM2____|D4S_DQ6____|LP4_CHB_DM0___|, Y10 PAD_DQ_BYTE0_3|D3C_DQ7____|D3S_DQ5____|D4C_DQ20___|D4S_DQ3____|LP4_CHB_DQ2___|, Y11 PAD_DQ_BYTE0_6|D3C_DQ2____|D3S_DQ3____|D4C_DQ21___|D4S_DQ1____|LP4_CHB_DQ3___|, Y12 PAD_DQ_BYTE1_0|D3C_DQ19___|D3S_DQ8____|D4C_DQ2____|D4S_DQ15___|LP4_CHB_DM1___|, Y13 PAD_DQ_BYTE1_3|D3C_DQ16___|D3S_DQ9____|D4C_DQ5____|D4S_DQ14___|LP4_CHB_DQ14__|, Y14 PAD_DQ_BYTE1_5|D3C_DQ18___|D3S_DQ14___|D4C_DQ0____|D4S_DQ13___|LP4_CHB_DQ12__|, Y15 PAD_DQ_BYTE2_0|D3C_DM3____|D3S_DQ16___|D4C_DM1____|D4S_DQ22___|LP4_CHA_DQ5___|, Y16 PAD_DQ_BYTE2_3|D3C_DQ27___|D3S_DQ21___|D4C_DQ8____|D4S_DQ19___|LP4_CHA_DM0___|, Y17 PAD_DQ_BYTE2_6|D3C_DQ24___|D3S_DQ19___|D4C_DQ14___|D4S_DQ17___|LP4_CHA_DQ0___|, Y18 PAD_DQ_BYTE3_1|D3C_DQ9____|D3S_DQ31___|D4C_DQ26___|D4S_DQ28___|LP4_CHA_DQ13__|, Y19 PAD_DQ_BYTE3_3|D3C_DQ15___|D3S_DQ24___|D4C_DQ28___|D4S_DQ31___|LP4_CHA_DQ14__|
part B pins: F3 SDIO0_PWR_EN, F4 SDIO0_CD, G1 EMMC_DAT3, G2 EMMC_RSTN, H1 EMMC_DAT1, H2 EMMC_DAT0, H3 EMMC_CMD, H4 EMMC_CLK, J2 EMMC_CAP, J3 EMMC_DAT2, K2 SDIO0_CAP, K4 SDIO0_CMD, L1 SDIO0_CLK, L2 SDIO0_D0, L3 SDIO0_D3, L4 SDIO0_D1, M1 SDIO0_D2
part C pins: A19 USB_DP (power), B19 USB_DM (power), E20 USB_VBUS_DET (power), F19 USB_ID (power), F20 USB_VBUS_EN, N15 PTEST
part D pins: C2 IIC0_SDA, C3 IIC3_SCL, D2 IIC0_SCL, D3 IIC3_SDA, J18 IIC2_SCL, J19 IIC2_SDA, J20 IIC1_SCL, K17 IIC1_SDA, L18 PWM3, M17 PWM1, M18 PWM0_BUCK, M19 PWM2
part E pins: C18 ADC1, E1 JTAG_CPU_TCK, E3 JTAG_CPU_TRST, F1 UART0_RX, F2 UART0_TX, F17 UART1_RTS, F18 UART1_CTS, G3 JTAG_CPU_TMS, G18 UART2_CTS, G19 UART1_RX, G20 UART1_TX, H17 UART2_TX, H18 UART2_RX, H19 UART2_RTS
part F pins: A17 EPHY_TXN, A18 EPHY_RXN, B17 EPHY_TXP, B18 EPHY_RXP, D15 EPHY_RTX, M2 RMII0_REFCLKI, M3 RMII0_TXD1, N2 RMII0_TXEN, N3 RMII0_TXD0, P1 RMII0_MDCK, P2 RMII0_MDIO, P3 RMII0_RXD0, P4 RMII0_RST, R1 RMII0_RXDV, R2 RMII0_RXD1
part G pins: B20 XTAL_XIN_XO, C20 XTAL_XIN_XI, D19 CLK32K, D20 CLK25M, E2 RSTN, N18 PWR_ON, N19 PWR_SEQ2, N20 PWR_SEQ3, P17 PWR_WAKEUP1, P18 PWR_VBAT_DET, P19 PWR_BUTTON1, P20 PWR_SEQ1, R17 PWR_WAKEUP0, R18 RTC_MODE, R19 RTC_XIN, R20 RTC_XOUT
part H pins: A2 VI_DATA20 (power), A3 VI_DATA22 (power), A4 MIPIRX0_PAD1P (power), A5 MIPIRX0_PAD2P (power), A6 MIPIRX0_PAD3P (power), A7 MIPIRX0_PAD4P (power), A8 MIPIRX1_PAD4P (power), A9 MIPIRX1_PAD2P (power), A10 MIPIRX1_PAD0P (power), A11 PAD_MIPI_TXP0 (power), A12 PAD_MIPI_TXP2 (power), A13 PAD_MIPI_TXP3 (power), A14 VO_DATA0 (power), B1 CAM_PD0, B2 VI_DATA19 (power), B3 VI_DATA21 (power), B4 MIPIRX0_PAD1N (power), B5 MIPIRX0_PAD2N (power), B6 MIPIRX0_PAD3N (power), B7 MIPIRX0_PAD4N (power), B8 MIPIRX1_PAD4N (power), B9 MIPIRX1_PAD2N (power), B10 MIPIRX1_PAD0N (power), B11 PAD_MIPI_TXM0 (power), B12 PAD_MIPI_TXM2 (power), B13 PAD_MIPI_TXM3 (power), B14 VO_DATA1 (power), C1 CAM_MCLK0, C5 MIPIRX0_PAD0P (power), C6 MIPIRX0_PAD0N (power), C7 MIPIRX1_PAD3P (power), C8 MIPIRX1_PAD3N (power), C9 MIPIRX1_PAD1P (power), C10 MIPIRX1_PAD1N (power), C11 PAD_MIPI_TXP1 (power), C12 PAD_MIPI_TXM1 (power), C13 PAD_MIPI_TXM4 (power), D1 CAM_RST0, D4 VI_DATA23 (power), D5 VI_DATA24 (power), D12 PAD_MIPI_TXP4 (power), K18 SPI0_SDO, K19 SPI0_SDI, K20 SPI0_CS_X, L19 SPI0_SCK
part I pins: C14 VDD18A_AUD (power), C16 VDD18A_EPHY (power), C17 VDD09A_EPHY (power), D7 VDD18A_MIPI (power), D8 VDD18A_MIPI (power), D11 VDD18A_MIPI (power), D16 VDD18A_USB, D17 VDD18A (power), D18 VDD09A_MIPI (power), E4 VDDIO18_0 (power), E17 VDD33A_EPHY (power), E18 VCC33A_USB, F7 VDDC (power), F8 VDDC (power), F11 VDDC (power), F12 VDDC (power), F14 VDD18A_EFUSE (power), F15 BOOT_MS, G4 VDDIO_EMMC (power), G17 VDDIO18_1 (power), H6 VDDC (power), H14 VDDC_TPU (power), H15 VDDC_TPU (power), J4 VDDIO_SD0 (power), J6 VDDC (power), J14 VDDC_TPU (power), J15 VDDC_TPU (power), J17 VDDIO18_1 (power), K1 VIN3V (power), K3 VOUT_VO (power), L6 VDDC (power), L14 VDDC_TPU (power), L15 VDDC_TPU (power), L17 VDDIO18_1 (power), M4 VDDIO18_RM0 (power), M6 VDDC (power), M14 VDDC_TPU (power), M15 VDDC_TPU (power), N4 VDDC_RM0 (power), N7 VDDC (power), N8 VDDC (power), N12 VDDC (power), N13 VDDC (power), R6 VDDQ (power), R7 VDDQ (power), R9 VDDQ (power), R10 VDDQ (power), R13 VDDQ (power), R14 VDDQ (power), T18 VDDIO_RTC (power), T19 VDDC_RTC (power)
part J pins: A1 VSSC, A20 VSSA, C4 VSSA, C19 VSSA, D6 VSSA, D9 VSSA, D10 VSSA, D13 VSSA_AUD, E19 VSSA, F6 VSSC, F9 VSSC, F10 VSSC, F13 VSSC, G6 VSSC, G7 VSSC, G8 VSSC, G9 VSSC, G10 VSSC, G11 VSSC, G12 VSSC, G13 VSSC, G14 VSSC, G15 VSSC, H7 VSSC, H8 VSSC, H9 VSSC, H10 VSSC, H11 VSSC, H12 VSSC, H13 VSSC, J7 VSSC, J8 VSSC, J9 VSSC, J10 VSSC, J11 VSSC, J12 VSSC, J13 VSSC, K6 VSSC, K7 VSSC, K8 VSSC, K9 VSSC, K10 VSSC, K11 VSSC, K12 VSSC, K13 VSSC, K14 VSSC, K15 VSSC, L7 VSSC, L8 VSSC, L9 VSSC, L10 VSSC, L11 VSSC, L12 VSSC, L13 VSSC, M7 VSSC, M8 VSSC, M9 VSSC, M10 VSSC, M11 VSSC, M12 VSSC, M13 VSSC, M20 VSSC, N6 VSSC, N9 VSSC, N11 VSSC, N14 VSSC, N17 VSSC, R3 VSSC, R4 VSSC, R5 VSSC, R8 VSSC, R12 VSSC, R15 VSSC, R16 VSSC, T1 VSSC, T2 VSSC, T8 VSSC, T10 VSSC, T11 VSSC, T13 VSSC, T14 VSSC, T15 VSSC, T17 VSSC, V3 VSSC, V6 VSSC, V9 VSSC, V12 VSSC, V15 VSSC, Y1 VSSC, Y20 VSSC
part K pins: A15 AADC_AINR_MIC, A16 ADAC_AOUTL, B15 AADC_AINL_MIC, B16 ADAC_AOUTR, C15 ADAC_VREF_DA, D14 AADC_VREF_AD
part A text: MIU_internal

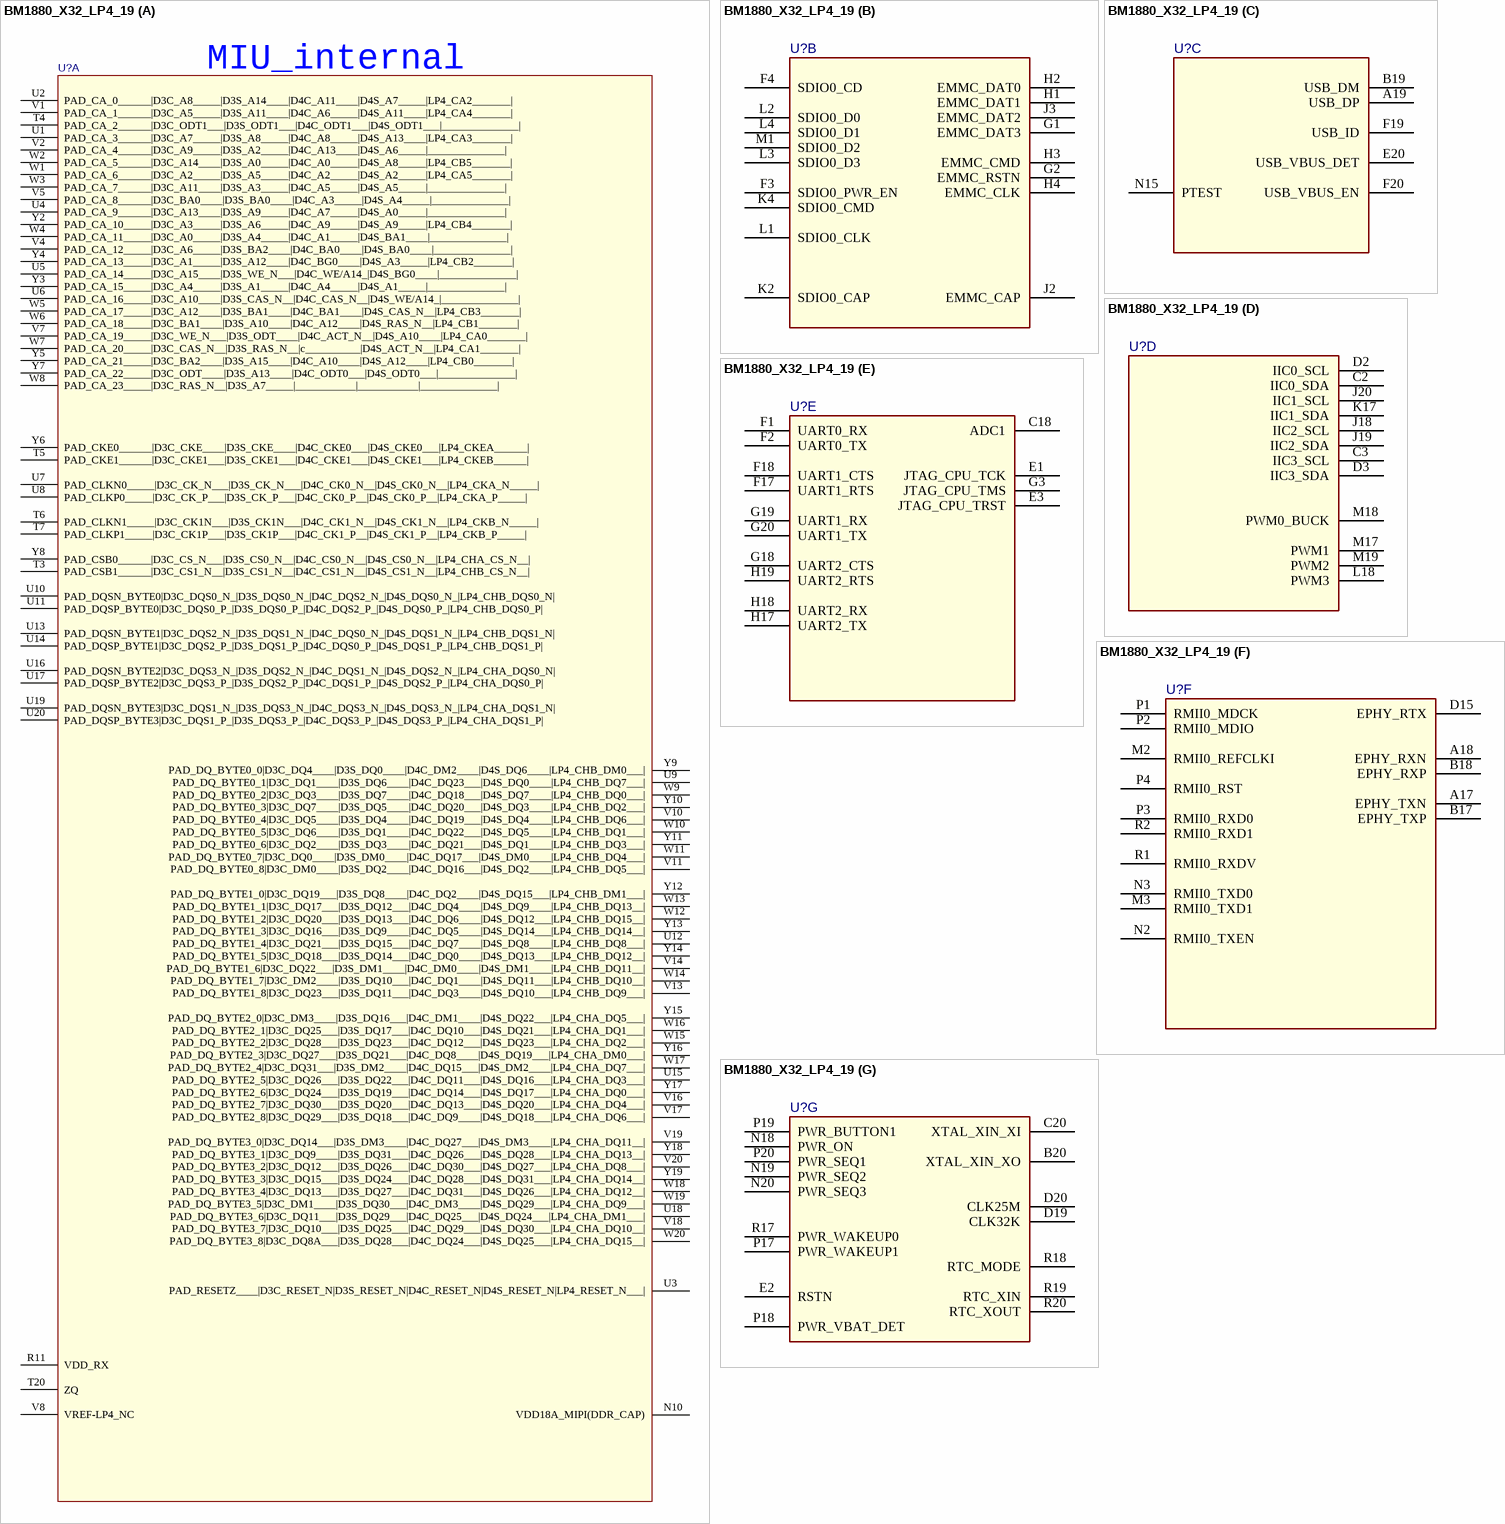
[diagram p36: symbol BM1880_X32_LP4_19]

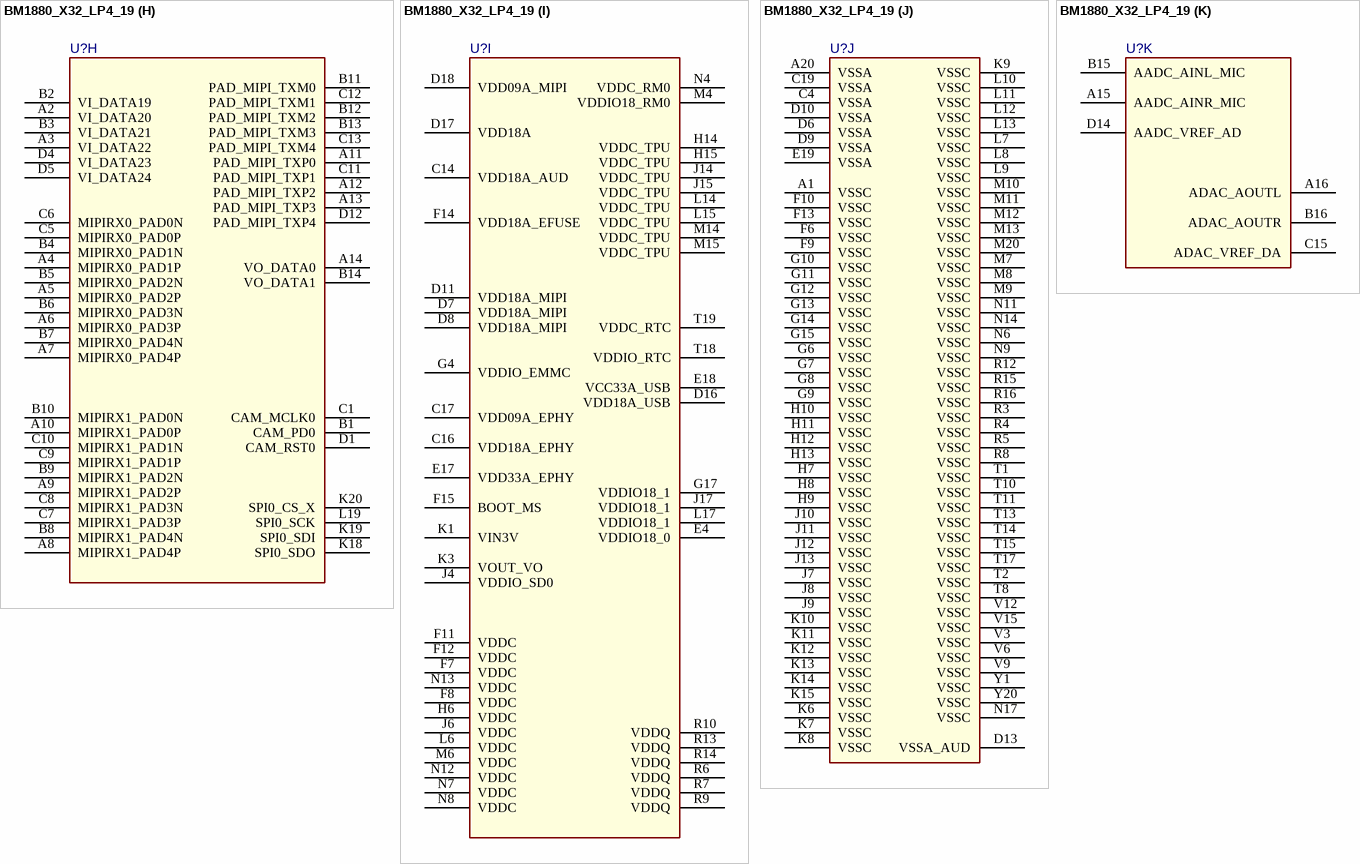
[diagram p37: symbol BM1880_X32_LP4_19]